# Altium schematic symbol library DIM.SCHLIB: 488 symbols (part 3 of 5)
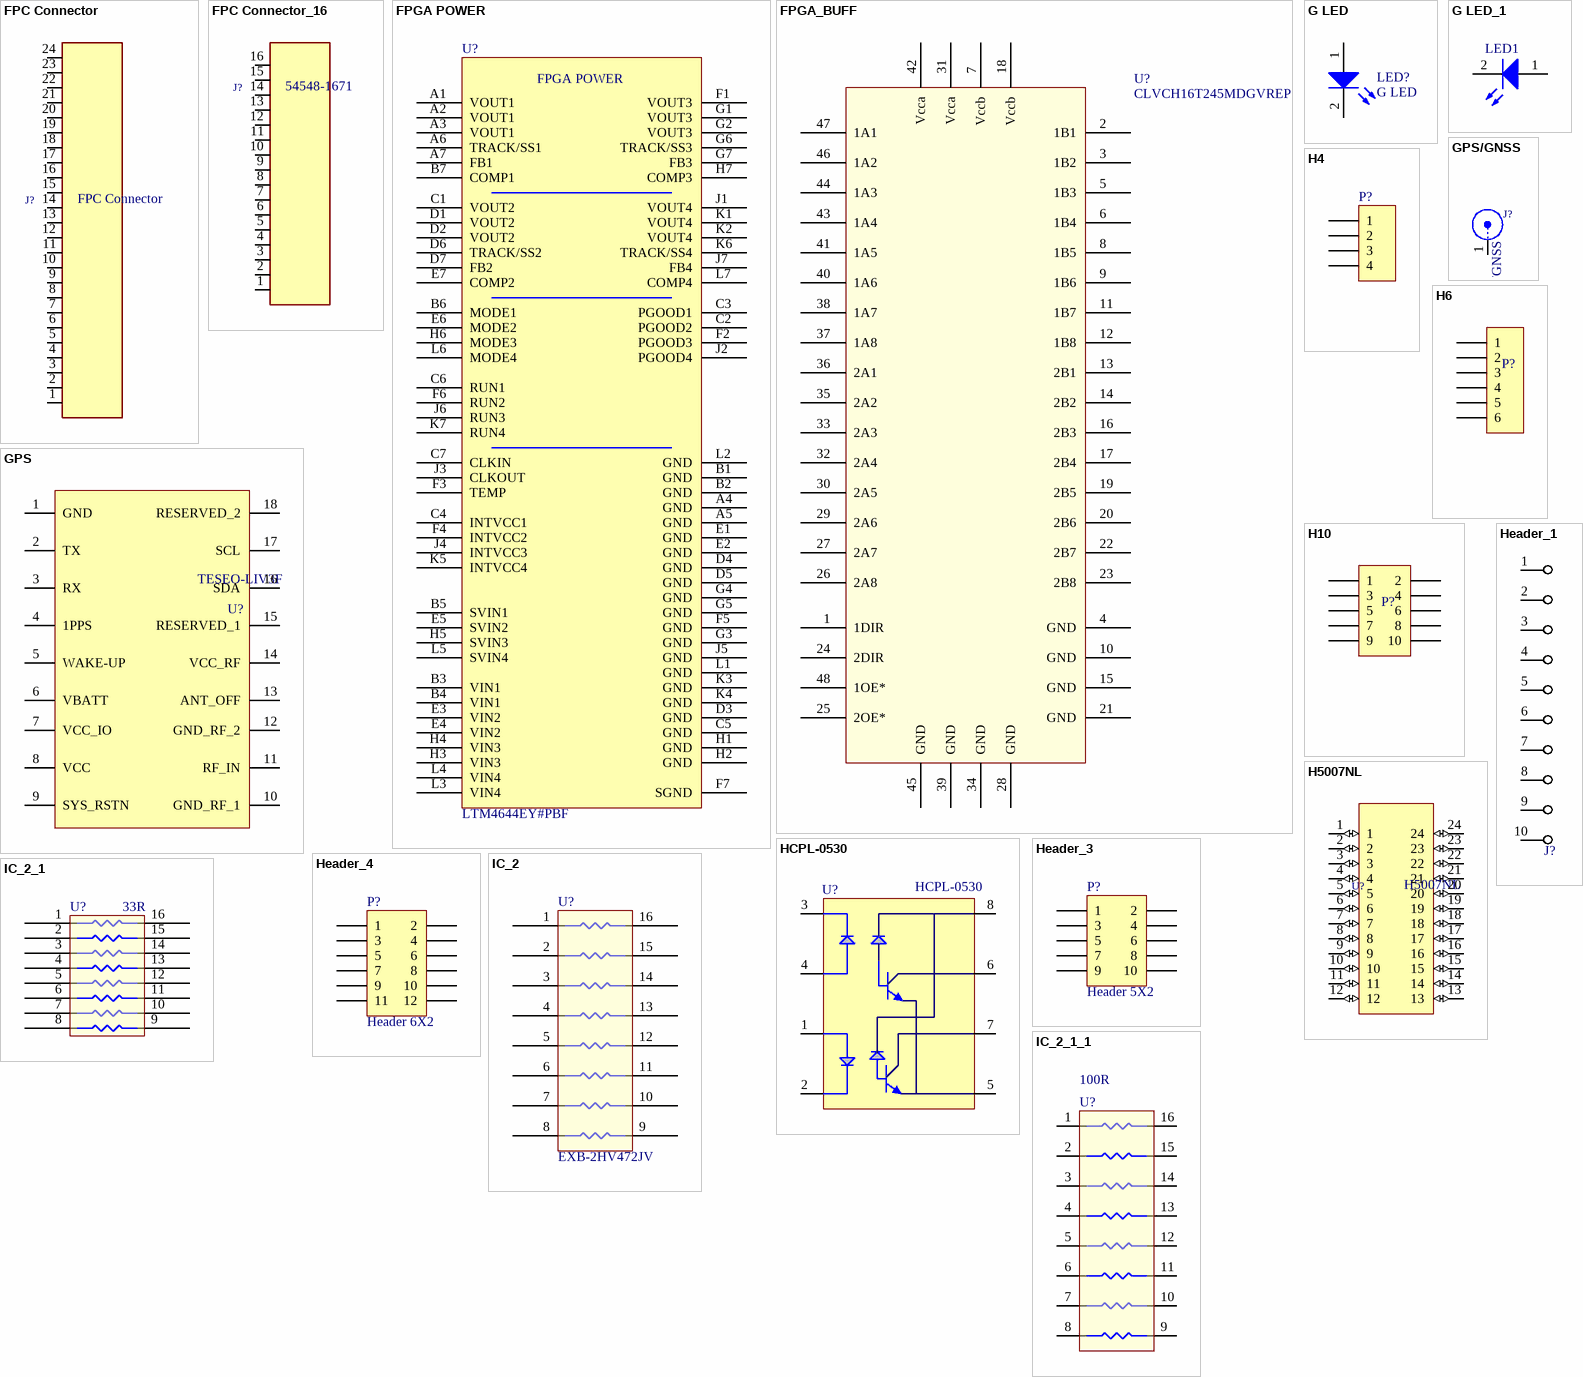
[diagram p27: symbols FPC Connector to IC_2_1_1]

## IC_2_1
designator U?, comment 33R
RES ARRAY 8 RES 33 OHM 1506; Manufacturer: Panasonic Electronic Components; Manufacturer Part Number: EXB-2HV330JV; Value: 33R; Package: 1506; Supplier: Digikey; Supplier Part Number: Y1330CT-ND; Operating Temperature: -55°C ~ 125°C
footprint EXB-2HV472JV
pins: 1, 2, 3, 4, 5, 6, 7, 8, 9, 10, 11, 12, 13, 14, 15, 16

## IC_2_1_1
designator U?, comment 100R
RES ARRAY 8 RES 22 OHM 1506; Manufacturer: Panasonic Electronic Components; Manufacturer Part Number: EXB-2HV101JV; Value: 100R; Package: 1506; Supplier: Digikey; Operating Temperature: -55°C ~ 125°C
footprint EXB-2HV472JV
pins: 1, 2, 3, 4, 5, 6, 7, 8, 9, 10, 11, 12, 13, 14, 15, 16

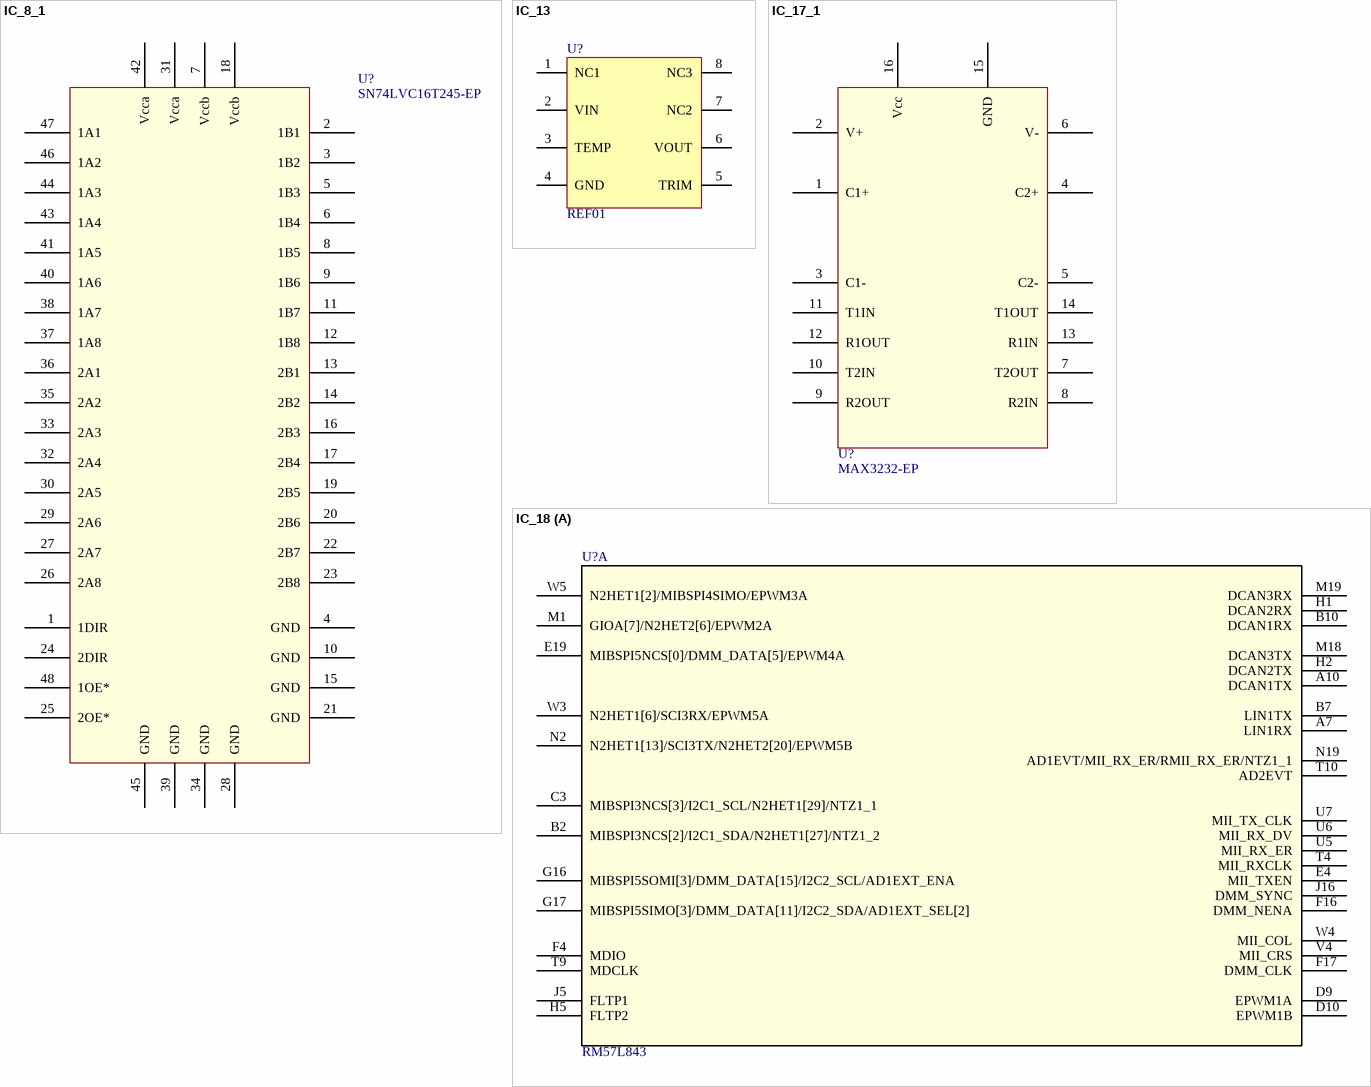
[diagram p9: symbols IC_8_1 to IC_18]

## IC_8_1
designator U?, comment SN74LVC16T245-EP
Transceiver-SN74LVC16T245-EP; Manufacturer: IDT; Manufacturer Part Number: CLVC16T245MDGGEP; Value: SN74LVC16T245-EP; Package: TSSOP-48; Supplier: Mouser; Supplier Part Number: 595-CLVC16T245MDGGEP; Operating Temperature: -55°C ~ 125°C
footprint TSSOP-48
pins: 1 1DIR, 2 1B1, 3 1B2, 4 GND, 5 1B3, 6 1B4, 7 Vccb, 8 1B5, 9 1B6, 10 GND, 11 1B7, 12 1B8, 13 2B1, 14 2B2, 15 GND, 16 2B3, 17 2B4, 18 Vccb, 19 2B5, 20 2B6, 21 GND, 22 2B7, 23 2B8, 24 2DIR, 25 2OE*, 26 2A8, 27 2A7, 28 GND, 29 2A6, 30 2A5, 31 Vcca, 32 2A4, 33 2A3, 34 GND, 35 2A2, 36 2A1, 37 1A8, 38 1A7, 39 GND, 40 1A6, 41 1A5, 42 Vcca, 43 1A4, 44 1A3, 45 GND, 46 1A2, 47 1A1, 48 1OE*

## IC_13
designator U?, comment REF01
Voltage References 10V PREC VOLT REFERENCE IC; Manufacturer: Analog Devices; Manufacturer Part Number: 5962-8958101PA; Package: CDIP-8; Supplier: Mouser; Supplier Part Number: 584-5962-8958101PA; Unit Price: *; Value: REF01
footprint REF01
pins: 1 NC1, 2 VIN, 3 TEMP, 4 GND, 5 TRIM, 6 VOUT, 7 NC2, 8 NC3

## IC_17_1
designator U?, comment MAX3232-EP
RS232-MAX3232-EP; Manufacturer: Texas Instruments; Manufacturer Part Number: MAX3232MDBREP; Value: MAX3232-EP; Package: 16-SSOP; Supplier: Digikey; Supplier Part Number: 296-19873-2-ND; Operating Temperature: -55°C ~ 155°C
footprint SSOP-16
pins: 1 C1+, 2 V+, 3 C1-, 4 C2+, 5 C2-, 6 V-, 7 T2OUT, 8 R2IN, 9 R2OUT, 10 T2IN, 11 T1IN, 12 R1OUT, 13 R1IN, 14 T1OUT, 15 GND, 16 Vcc

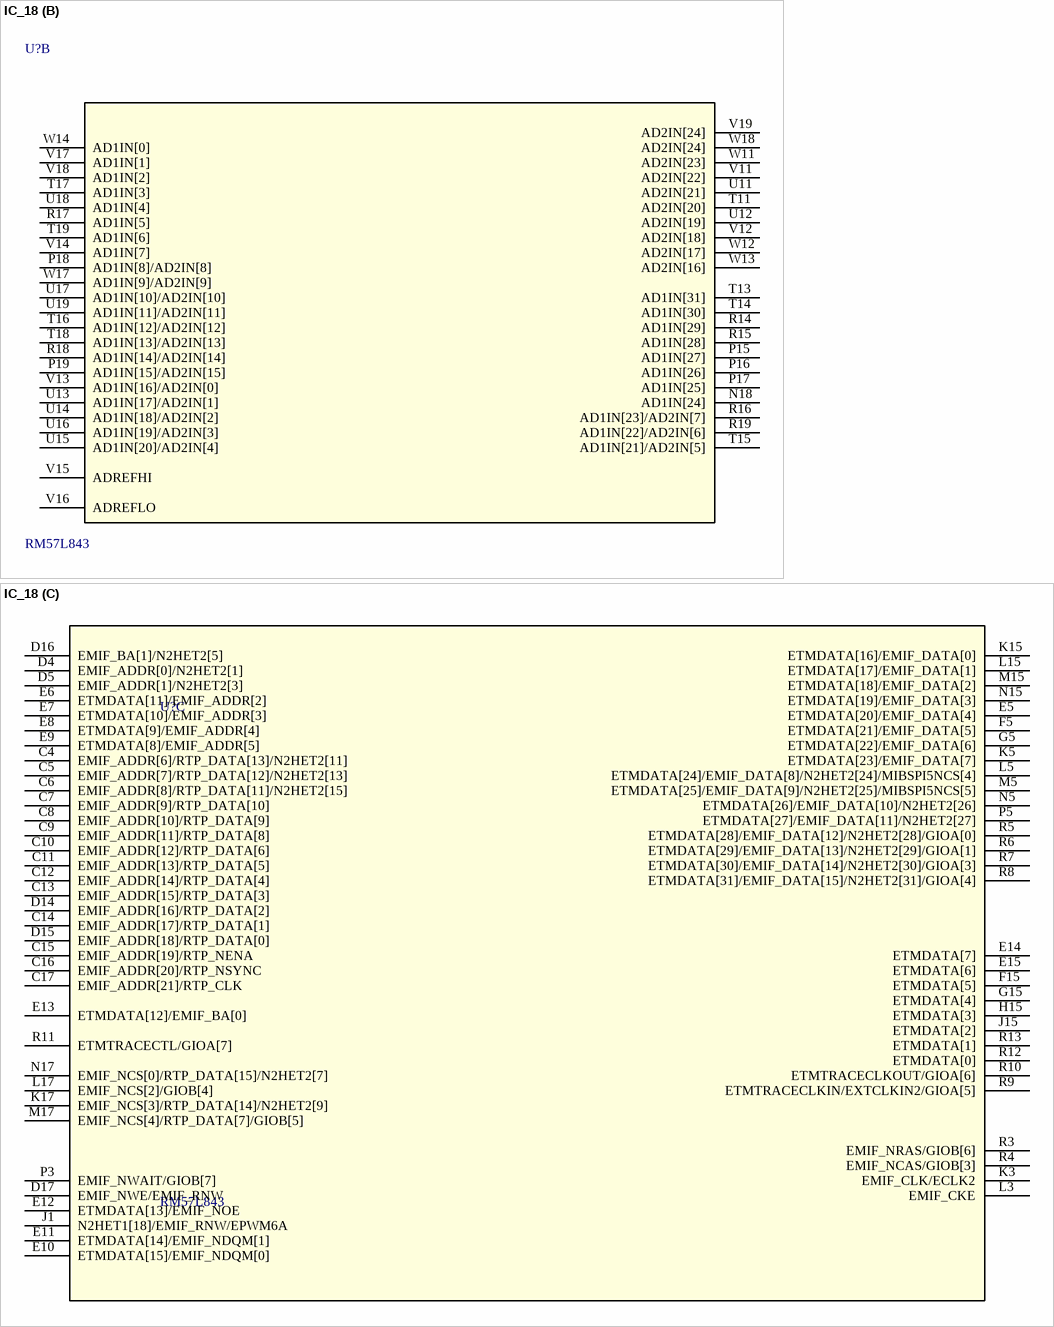
[diagram p10: symbol IC_18]

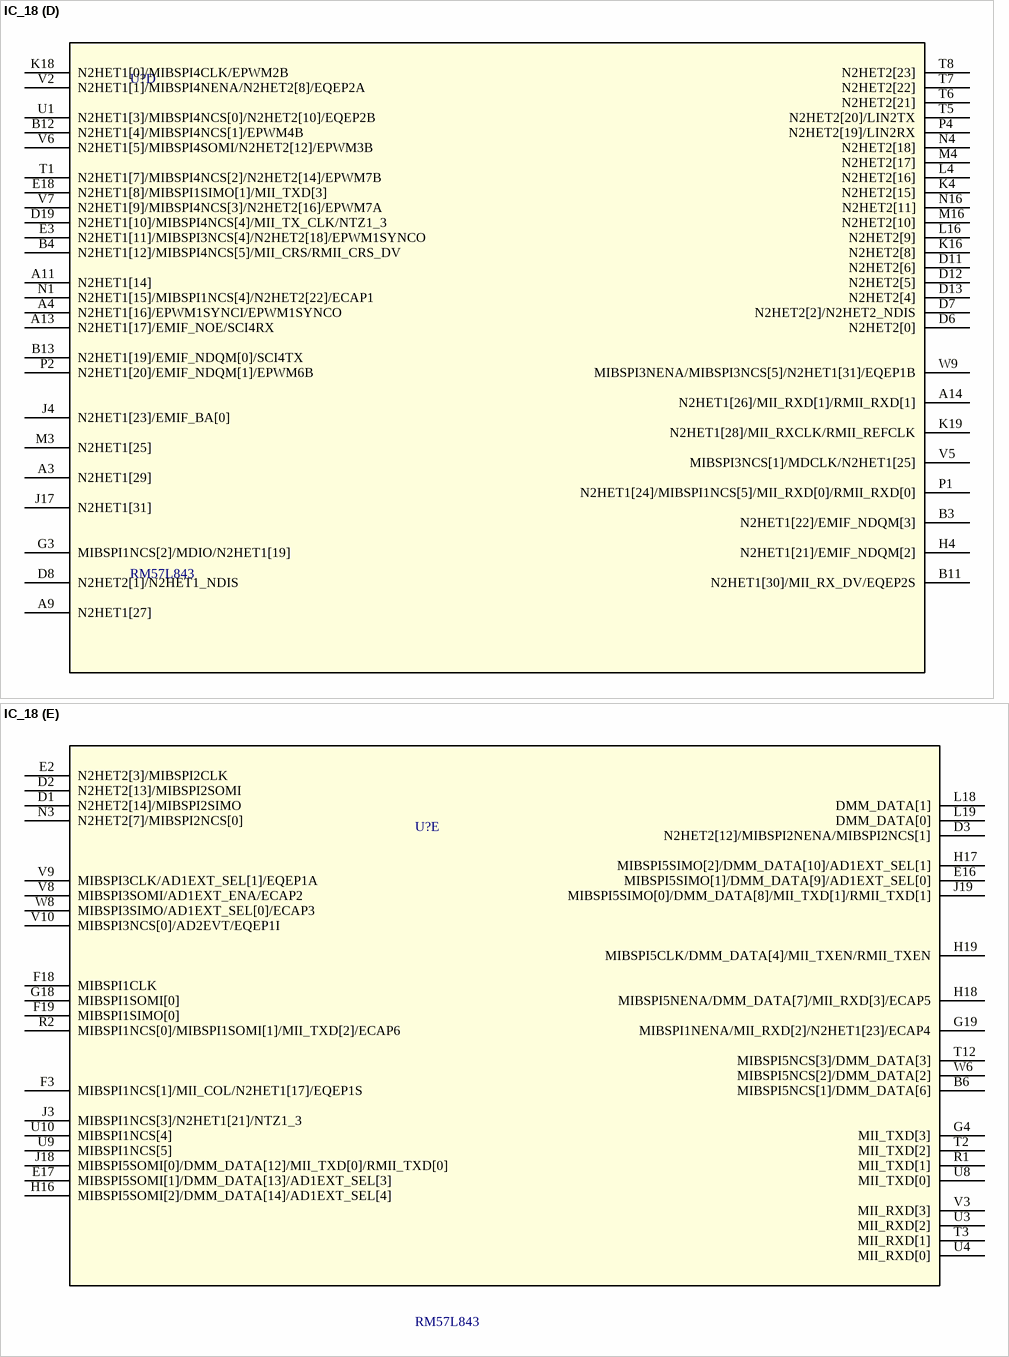
[diagram p11: symbol IC_18]

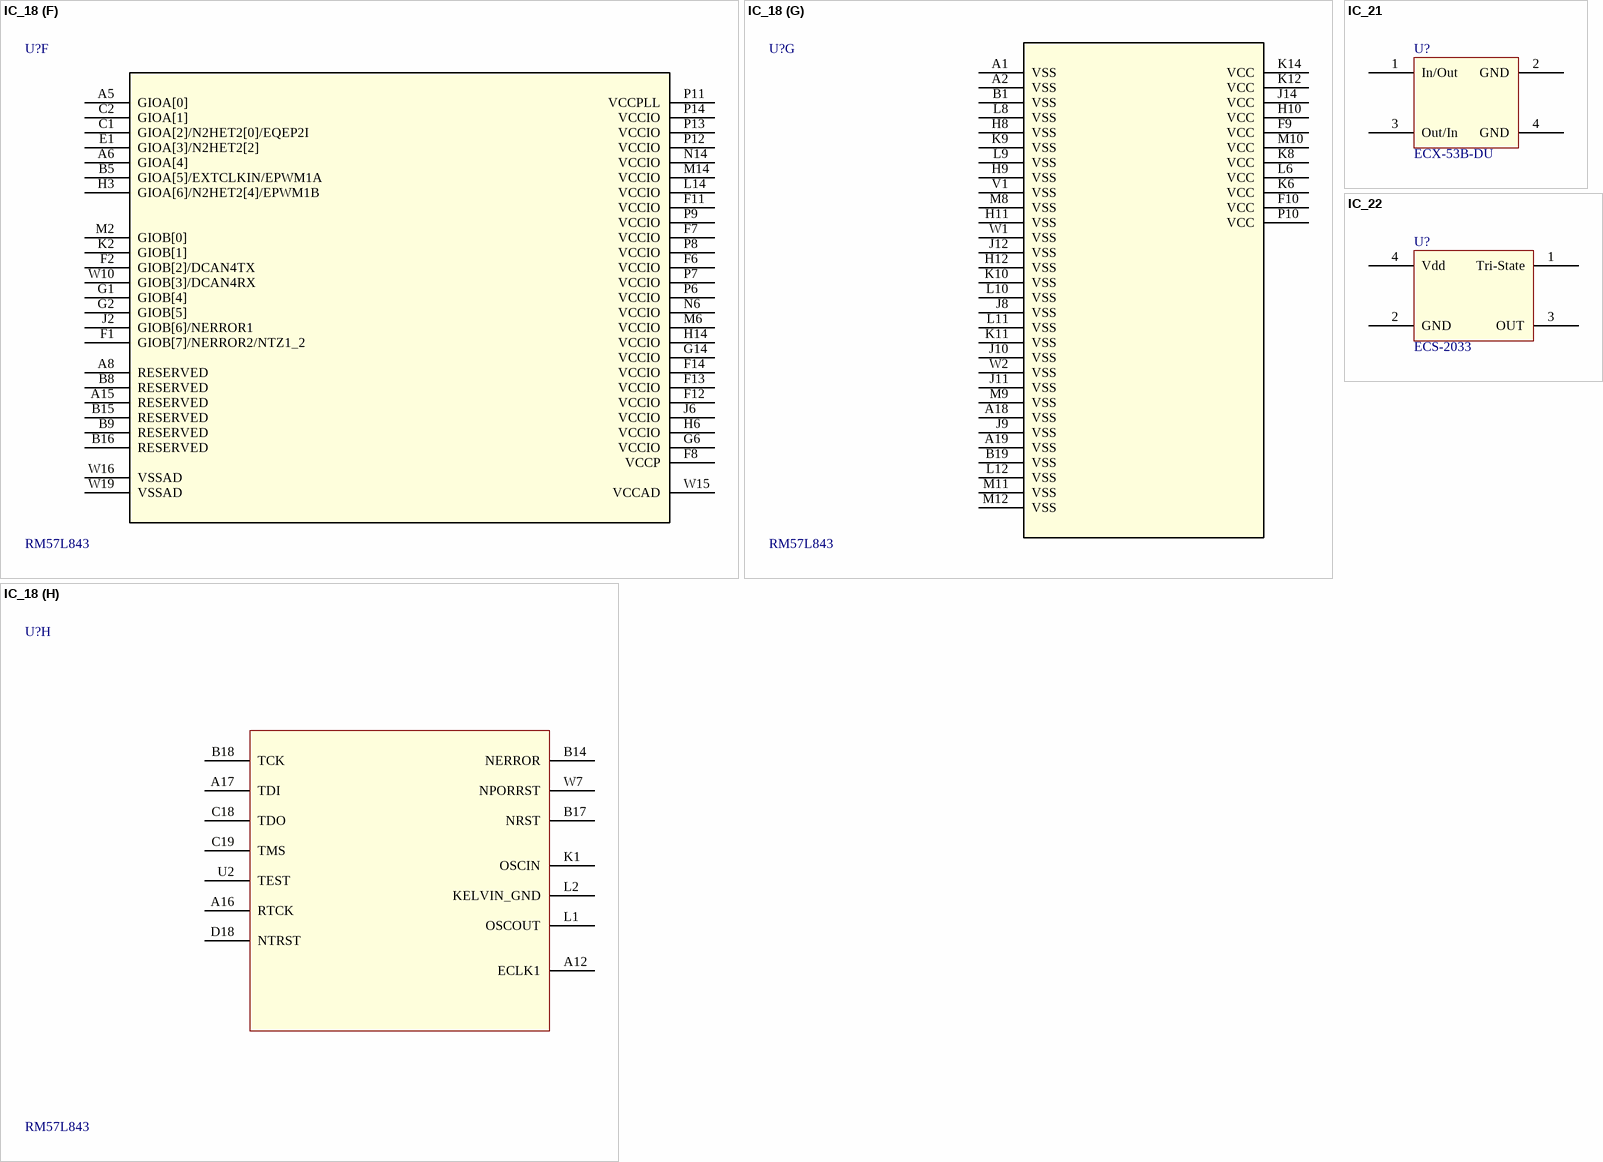
[diagram p12: symbols IC_18 to IC_22]

## IC_18
designator U?, comment RM57L843
uC-RM57L843; Manufacturer: Texas Instruments; Manufacturer Part Number: RM57L843BZWTT; Value: RM57L843; Package: nFBGA-337; Supplier: Mouser; Supplier Part Number: 595-RM57L843BZWTT; Operating Temperature: -40°C ~ 105°C
footprint 337-NFBGA
part A pins: A7 LIN1RX, A10 DCAN1TX, B2 MIBSPI3NCS[2]/I2C1_SDA/N2HET1[27]/NTZ1_2, B7 LIN1TX, B10 DCAN1RX, C3 MIBSPI3NCS[3]/I2C1_SCL/N2HET1[29]/NTZ1_1, D9 EPWM1A, D10 EPWM1B, E4 MII_TXEN, E19 MIBSPI5NCS[0]/DMM_DATA[5]/EPWM4A, F4 MDIO, F16 DMM_NENA, F17 DMM_CLK, G16 MIBSPI5SOMI[3]/DMM_DATA[15]/I2C2_SCL/AD1EXT_ENA, G17 MIBSPI5SIMO[3]/DMM_DATA[11]/I2C2_SDA/AD1EXT_SEL[2], H1 DCAN2RX, H2 DCAN2TX, H5 FLTP2, J5 FLTP1, J16 DMM_SYNC, M1 GIOA[7]/N2HET2[6]/EPWM2A, M18 DCAN3TX, M19 DCAN3RX, N2 N2HET1[13]/SCI3TX/N2HET2[20]/EPWM5B, N19 AD1EVT/MII_RX_ER/RMII_RX_ER/NTZ1_1, T4 MII_RXCLK, T9 MDCLK, T10 AD2EVT, U5 MII_RX_ER, U6 MII_RX_DV, U7 MII_TX_CLK, V4 MII_CRS, W3 N2HET1[6]/SCI3RX/EPWM5A, W4 MII_COL, W5 N2HET1[2]/MIBSPI4SIMO/EPWM3A
part B pins: N18 AD1IN[24], P15 AD1IN[27], P16 AD1IN[26], P17 AD1IN[25], P18 AD1IN[8]/AD2IN[8], P19 AD1IN[15]/AD2IN[15], R14 AD1IN[29], R15 AD1IN[28], R16 AD1IN[23]/AD2IN[7], R17 AD1IN[5], R18 AD1IN[14]/AD2IN[14], R19 AD1IN[22]/AD2IN[6], T11 AD2IN[20], T13 AD1IN[31], T14 AD1IN[30], T15 AD1IN[21]/AD2IN[5], T16 AD1IN[12]/AD2IN[12], T17 AD1IN[3], T18 AD1IN[13]/AD2IN[13], T19 AD1IN[6], U11 AD2IN[21], U12 AD2IN[19], U13 AD1IN[17]/AD2IN[1], U14 AD1IN[18]/AD2IN[2], U15 AD1IN[20]/AD2IN[4], U16 AD1IN[19]/AD2IN[3], U17 AD1IN[10]/AD2IN[10], U18 AD1IN[4], U19 AD1IN[11]/AD2IN[11], V11 AD2IN[22], V12 AD2IN[18], V13 AD1IN[16]/AD2IN[0], V14 AD1IN[7], V15 ADREFHI, V16 ADREFLO, V17 AD1IN[1], V18 AD1IN[2], V19 AD2IN[24], W11 AD2IN[23], W12 AD2IN[17], W13 AD2IN[16], W14 AD1IN[0], W17 AD1IN[9]/AD2IN[9], W18 AD2IN[24]
part C pins: C4 EMIF_ADDR[6]/RTP_DATA[13]/N2HET2[11], C5 EMIF_ADDR[7]/RTP_DATA[12]/N2HET2[13], C6 EMIF_ADDR[8]/RTP_DATA[11]/N2HET2[15], C7 EMIF_ADDR[9]/RTP_DATA[10], C8 EMIF_ADDR[10]/RTP_DATA[9], C9 EMIF_ADDR[11]/RTP_DATA[8], C10 EMIF_ADDR[12]/RTP_DATA[6], C11 EMIF_ADDR[13]/RTP_DATA[5], C12 EMIF_ADDR[14]/RTP_DATA[4], C13 EMIF_ADDR[15]/RTP_DATA[3], C14 EMIF_ADDR[17]/RTP_DATA[1], C15 EMIF_ADDR[19]/RTP_NENA, C16 EMIF_ADDR[20]/RTP_NSYNC, C17 EMIF_ADDR[21]/RTP_CLK, D4 EMIF_ADDR[0]/N2HET2[1], D5 EMIF_ADDR[1]/N2HET2[3], D14 EMIF_ADDR[16]/RTP_DATA[2], D15 EMIF_ADDR[18]/RTP_DATA[0], D16 EMIF_BA[1]/N2HET2[5], D17 EMIF_NWE/EMIF_RNW, E5 ETMDATA[20]/EMIF_DATA[4], E6 ETMDATA[11]/EMIF_ADDR[2], E7 ETMDATA[10]/EMIF_ADDR[3], E8 ETMDATA[9]/EMIF_ADDR[4], E9 ETMDATA[8]/EMIF_ADDR[5], E10 ETMDATA[15]/EMIF_NDQM[0], E11 ETMDATA[14]/EMIF_NDQM[1], E12 ETMDATA[13]/EMIF_NOE, E13 ETMDATA[12]/EMIF_BA[0], E14 ETMDATA[7], E15 ETMDATA[6], F5 ETMDATA[21]/EMIF_DATA[5], F15 ETMDATA[5], G5 ETMDATA[22]/EMIF_DATA[6], G15 ETMDATA[4], H15 ETMDATA[3], J1 N2HET1[18]/EMIF_RNW/EPWM6A, J15 ETMDATA[2], K3 EMIF_CLK/ECLK2, K5 ETMDATA[23]/EMIF_DATA[7], K15 ETMDATA[16]/EMIF_DATA[0], K17 EMIF_NCS[3]/RTP_DATA[14]/N2HET2[9], L3 EMIF_CKE, L5 ETMDATA[24]/EMIF_DATA[8]/N2HET2[24]/MIBSPI5NCS[4], L15 ETMDATA[17]/EMIF_DATA[1], L17 EMIF_NCS[2]/GIOB[4], M5 ETMDATA[25]/EMIF_DATA[9]/N2HET2[25]/MIBSPI5NCS[5], M15 ETMDATA[18]/EMIF_DATA[2], M17 EMIF_NCS[4]/RTP_DATA[7]/GIOB[5], N5 ETMDATA[26]/EMIF_DATA[10]/N2HET2[26], N15 ETMDATA[19]/EMIF_DATA[3], N17 EMIF_NCS[0]/RTP_DATA[15]/N2HET2[7], P3 EMIF_NWAIT/GIOB[7], P5 ETMDATA[27]/EMIF_DATA[11]/N2HET2[27], R3 EMIF_NRAS/GIOB[6], R4 EMIF_NCAS/GIOB[3], R5 ETMDATA[28]/EMIF_DATA[12]/N2HET2[28]/GIOA[0], R6 ETMDATA[29]/EMIF_DATA[13]/N2HET2[29]/GIOA[1], R7 ETMDATA[30]/EMIF_DATA[14]/N2HET2[30]/GIOA[3], R8 ETMDATA[31]/EMIF_DATA[15]/N2HET2[31]/GIOA[4], R9 ETMTRACECLKIN/EXTCLKIN2/GIOA[5], R10 ETMTRACECLKOUT/GIOA[6], R11 ETMTRACECTL/GIOA[7], R12 ETMDATA[0], R13 ETMDATA[1]
part D pins: A3 N2HET1[29], A4 N2HET1[16]/EPWM1SYNCI/EPWM1SYNCO, A9 N2HET1[27], A11 N2HET1[14], A13 N2HET1[17]/EMIF_NOE/SCI4RX, A14 N2HET1[26]/MII_RXD[1]/RMII_RXD[1], B3 N2HET1[22]/EMIF_NDQM[3], B4 N2HET1[12]/MIBSPI4NCS[5]/MII_CRS/RMII_CRS_DV, B11 N2HET1[30]/MII_RX_DV/EQEP2S, B12 N2HET1[4]/MIBSPI4NCS[1]/EPWM4B, B13 N2HET1[19]/EMIF_NDQM[0]/SCI4TX, D6 N2HET2[0], D7 N2HET2[2]/N2HET2_NDIS, D8 N2HET2[1]/N2HET1_NDIS, D11 N2HET2[6], D12 N2HET2[5], D13 N2HET2[4], D19 N2HET1[10]/MIBSPI4NCS[4]/MII_TX_CLK/NTZ1_3, E3 N2HET1[11]/MIBSPI3NCS[4]/N2HET2[18]/EPWM1SYNCO, E18 N2HET1[8]/MIBSPI1SIMO[1]/MII_TXD[3], G3 MIBSPI1NCS[2]/MDIO/N2HET1[19], H4 N2HET1[21]/EMIF_NDQM[2], J4 N2HET1[23]/EMIF_BA[0], J17 N2HET1[31], K4 N2HET2[15], K16 N2HET2[8], K18 N2HET1[0]/MIBSPI4CLK/EPWM2B, K19 N2HET1[28]/MII_RXCLK/RMII_REFCLK, L4 N2HET2[16], L16 N2HET2[9], M3 N2HET1[25], M4 N2HET2[17], M16 N2HET2[10], N1 N2HET1[15]/MIBSPI1NCS[4]/N2HET2[22]/ECAP1, N4 N2HET2[18], N16 N2HET2[11], P1 N2HET1[24]/MIBSPI1NCS[5]/MII_RXD[0]/RMII_RXD[0], P2 N2HET1[20]/EMIF_NDQM[1]/EPWM6B, P4 N2HET2[19]/LIN2RX, T1 N2HET1[7]/MIBSPI4NCS[2]/N2HET2[14]/EPWM7B, T5 N2HET2[20]/LIN2TX, T6 N2HET2[21], T7 N2HET2[22], T8 N2HET2[23], U1 N2HET1[3]/MIBSPI4NCS[0]/N2HET2[10]/EQEP2B, V2 N2HET1[1]/MIBSPI4NENA/N2HET2[8]/EQEP2A, V5 MIBSPI3NCS[1]/MDCLK/N2HET1[25], V6 N2HET1[5]/MIBSPI4SOMI/N2HET2[12]/EPWM3B, V7 N2HET1[9]/MIBSPI4NCS[3]/N2HET2[16]/EPWM7A, W9 MIBSPI3NENA/MIBSPI3NCS[5]/N2HET1[31]/EQEP1B
part E pins: B6 MIBSPI5NCS[1]/DMM_DATA[6], D1 N2HET2[14]/MIBSPI2SIMO, D2 N2HET2[13]/MIBSPI2SOMI, D3 N2HET2[12]/MIBSPI2NENA/MIBSPI2NCS[1], E2 N2HET2[3]/MIBSPI2CLK, E16 MIBSPI5SIMO[1]/DMM_DATA[9]/AD1EXT_SEL[0], E17 MIBSPI5SOMI[1]/DMM_DATA[13]/AD1EXT_SEL[3], F3 MIBSPI1NCS[1]/MII_COL/N2HET1[17]/EQEP1S, F18 MIBSPI1CLK, F19 MIBSPI1SIMO[0], G4 MII_TXD[3], G18 MIBSPI1SOMI[0], G19 MIBSPI1NENA/MII_RXD[2]/N2HET1[23]/ECAP4, H16 MIBSPI5SOMI[2]/DMM_DATA[14]/AD1EXT_SEL[4], H17 MIBSPI5SIMO[2]/DMM_DATA[10]/AD1EXT_SEL[1], H18 MIBSPI5NENA/DMM_DATA[7]/MII_RXD[3]/ECAP5, H19 MIBSPI5CLK/DMM_DATA[4]/MII_TXEN/RMII_TXEN, J3 MIBSPI1NCS[3]/N2HET1[21]/NTZ1_3, J18 MIBSPI5SOMI[0]/DMM_DATA[12]/MII_TXD[0]/RMII_TXD[0], J19 MIBSPI5SIMO[0]/DMM_DATA[8]/MII_TXD[1]/RMII_TXD[1], L18 DMM_DATA[1], L19 DMM_DATA[0], N3 N2HET2[7]/MIBSPI2NCS[0], R1 MII_TXD[1], R2 MIBSPI1NCS[0]/MIBSPI1SOMI[1]/MII_TXD[2]/ECAP6, T2 MII_TXD[2], T3 MII_RXD[1], T12 MIBSPI5NCS[3]/DMM_DATA[3], U3 MII_RXD[2], U4 MII_RXD[0], U8 MII_TXD[0], U9 MIBSPI1NCS[5], U10 MIBSPI1NCS[4], V3 MII_RXD[3], V8 MIBSPI3SOMI/AD1EXT_ENA/ECAP2, V9 MIBSPI3CLK/AD1EXT_SEL[1]/EQEP1A, V10 MIBSPI3NCS[0]/AD2EVT/EQEP1I, W6 MIBSPI5NCS[2]/DMM_DATA[2], W8 MIBSPI3SIMO/AD1EXT_SEL[0]/ECAP3
part F pins: A5 GIOA[0], A6 GIOA[4], A8 RESERVED, A15 RESERVED, B5 GIOA[5]/EXTCLKIN/EPWM1A, B8 RESERVED, B9 RESERVED, B15 RESERVED, B16 RESERVED, C1 GIOA[2]/N2HET2[0]/EQEP2I, C2 GIOA[1], E1 GIOA[3]/N2HET2[2], F1 GIOB[7]/NERROR2/NTZ1_2, F2 GIOB[2]/DCAN4TX, F6 VCCIO, F7 VCCIO, F8 VCCP, F11 VCCIO, F12 VCCIO, F13 VCCIO, F14 VCCIO, G1 GIOB[4], G2 GIOB[5], G6 VCCIO, G14 VCCIO, H3 GIOA[6]/N2HET2[4]/EPWM1B, H6 VCCIO, H14 VCCIO, J2 GIOB[6]/NERROR1, J6 VCCIO, K2 GIOB[1], L14 VCCIO, M2 GIOB[0], M6 VCCIO, M14 VCCIO, N6 VCCIO, N14 VCCIO, P6 VCCIO, P7 VCCIO, P8 VCCIO, P9 VCCIO, P11 VCCPLL, P12 VCCIO, P13 VCCIO, P14 VCCIO, W10 GIOB[3]/DCAN4RX, W15 VCCAD, W16 VSSAD, W19 VSSAD
part G pins: A1 VSS, A2 VSS, A18 VSS, A19 VSS, B1 VSS, B19 VSS, F9 VCC, F10 VCC, H8 VSS, H9 VSS, H10 VCC, H11 VSS, H12 VSS, J8 VSS, J9 VSS, J10 VSS, J11 VSS, J12 VSS, J14 VCC, K6 VCC, K8 VCC, K9 VSS, K10 VSS, K11 VSS, K12 VCC, K14 VCC, L6 VCC, L8 VSS, L9 VSS, L10 VSS, L11 VSS, L12 VSS, M8 VSS, M9 VSS, M10 VCC, M11 VSS, M12 VSS, P10 VCC, V1 VSS, W1 VSS, W2 VSS
part H pins: A12 ECLK1, A16 RTCK, A17 TDI, B14 NERROR, B17 NRST, B18 TCK, C18 TDO, C19 TMS, D18 NTRST, K1 OSCIN, L1 OSCOUT, L2 KELVIN_GND, U2 TEST, W7 NPORRST

## IC_21
designator U?, comment ECX-53B-DU
Crystal_ECX-53B-DU; Manufacturer: ECS Inc.; Manufacturer Part Number: ECS-160-20-30B-DU; Value: ECX-53B-DU; Package: 4-SMD, No Lead; Supplier: Digikey; Supplier Part Number: XC1513CT-ND; Operating Temperature: -55°C ~ 125°C
footprint ECS-160
pins: 1 In/Out, 2 GND, 3 Out/In, 4 GND

## IC_22
designator U?, comment ECS-2033
Oscillator_ECS-2033; Manufacturer: ECS Inc.; Manufacturer Part Number: ECS-2033-160-AU; Value: ECS-2033; Package: 4-SMD, No Lead; Supplier: Digikey; Supplier Part Number: XC1858CT-ND; Operating Temperature: -55°C ~ 125°C
footprint ECS-2033
pins: 1 Tri-State, 2 GND, 3 OUT, 4 Vdd

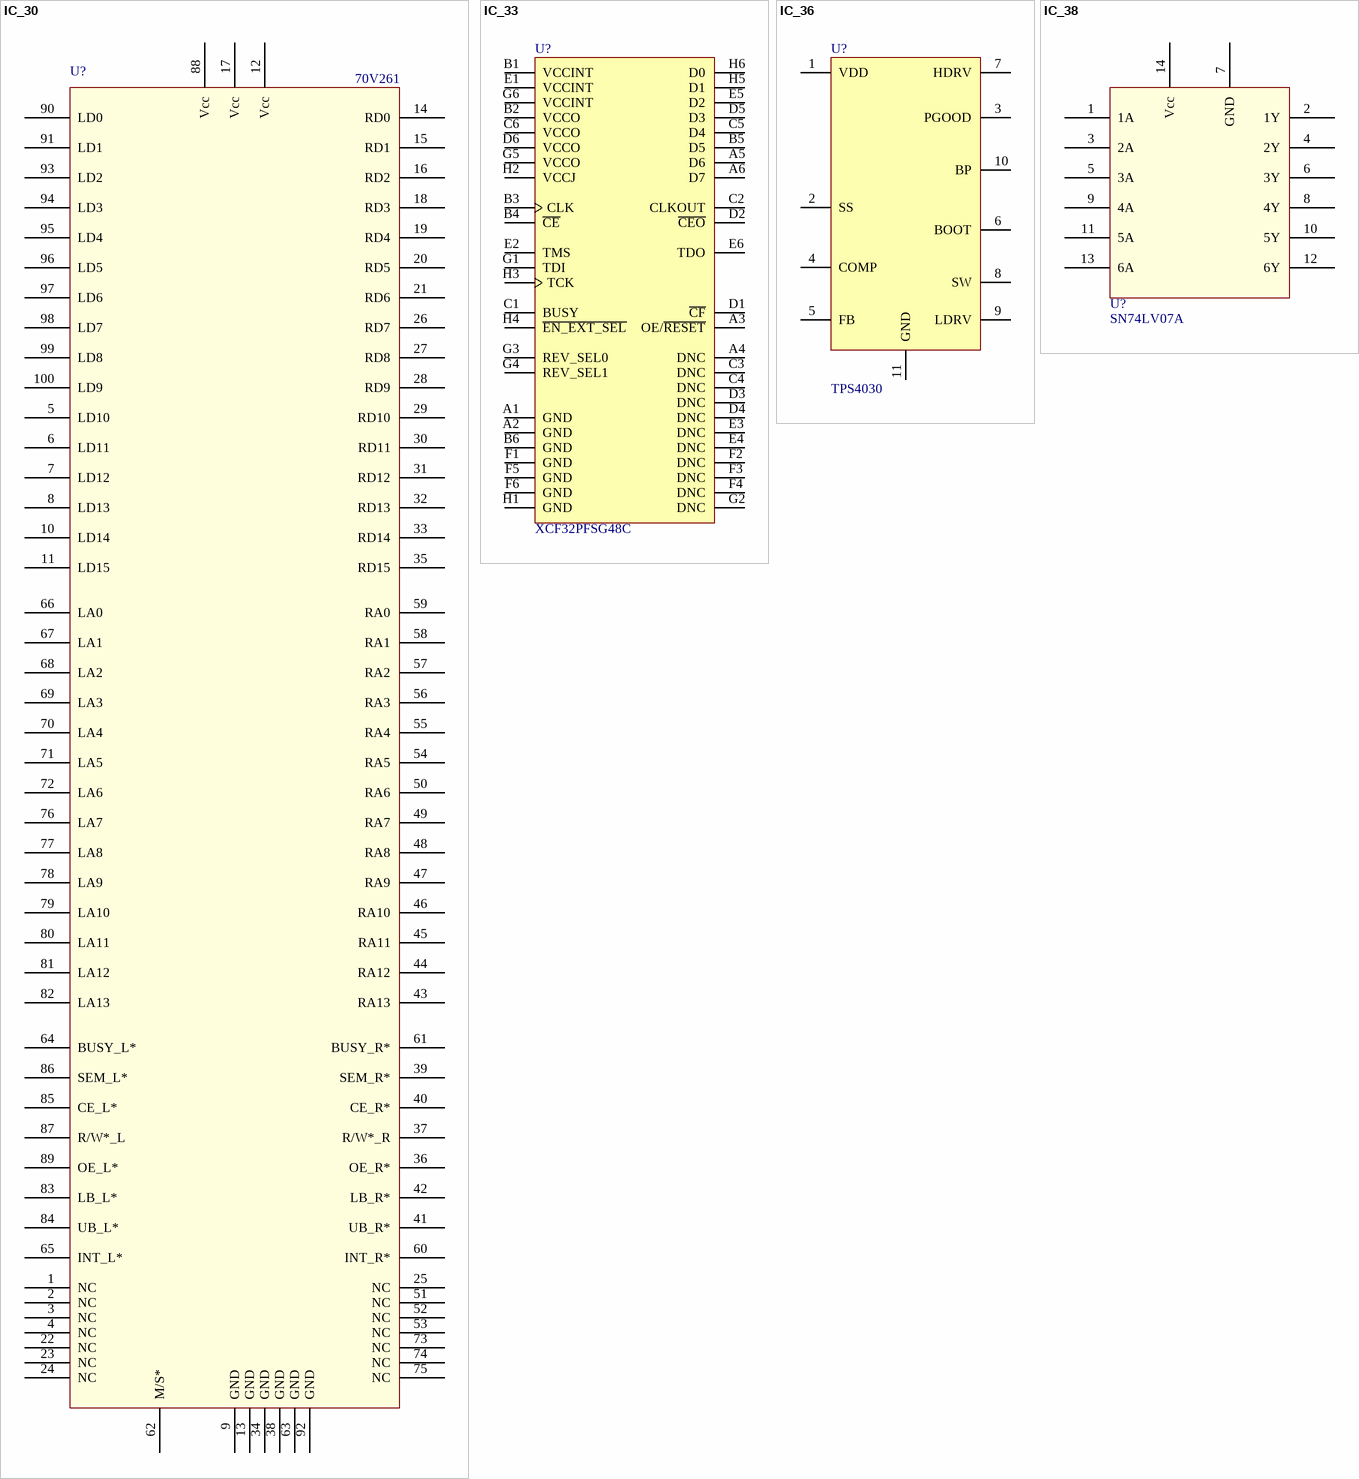
[diagram p13: symbols IC_30 to IC_38]

## IC_30
designator U?, comment 70V261
70V261_DPRAM; Manufacturer: IDT; Manufacturer Part Number: 70V261L25PFGI; Value: 70V261; Package: 100-LQFP; Supplier: Digikey; Supplier Part Number: 800-3672-ND
footprint 100-LQFP
pins: 1 NC, 2 NC, 3 NC, 4 NC, 5 LD10, 6 LD11, 7 LD12, 8 LD13, 9 GND, 10 LD14, 11 LD15, 12 Vcc, 13 GND, 14 RD0, 15 RD1, 16 RD2, 17 Vcc, 18 RD3, 19 RD4, 20 RD5, 21 RD6, 22 NC, 23 NC, 24 NC, 25 NC, 26 RD7, 27 RD8, 28 RD9, 29 RD10, 30 RD11, 31 RD12, 32 RD13, 33 RD14, 34 GND, 35 RD15, 36 OE_R*, 37 R/W*_R, 38 GND, 39 SEM_R*, 40 CE_R*, 41 UB_R*, 42 LB_R*, 43 RA13, 44 RA12, 45 RA11, 46 RA10, 47 RA9, 48 RA8, 49 RA7, 50 RA6, 51 NC, 52 NC, 53 NC, 54 RA5, 55 RA4, 56 RA3, 57 RA2, 58 RA1, 59 RA0, 60 INT_R*, 61 BUSY_R*, 62 M/S*, 63 GND, 64 BUSY_L*, 65 INT_L*, 66 LA0, 67 LA1, 68 LA2, 69 LA3, 70 LA4, 71 LA5, 72 LA6, 73 NC, 74 NC, 75 NC, 76 LA7, 77 LA8, 78 LA9, 79 LA10, 80 LA11, 81 LA12, 82 LA13, 83 LB_L*, 84 UB_L*, 85 CE_L*, 86 SEM_L*, 87 R/W*_L, 88 Vcc, 89 OE_L*, 90 LD0, 91 LD1, 92 GND, 93 LD2, 94 LD3, 95 LD4, 96 LD5, 97 LD6, 98 LD7, 99 LD8, 100 LD9

## IC_33
designator U?, comment XCF32PFSG48C
PROM_XCF32PFSG48C; Manufacturer: Xilinx Inc.; Supplier Part Number: 122-1457-ND; Manufacturer Part Number: XCF32PFSG48C; Package: 48-TFBGA, CSPBGA; Supplier: Digi-Key; Value: XCF32PFSG48C
footprint 48-TFBGA (BGA, 48-Leads, Body 9x8mm, Pitch 0.8mm)
pins: A1 GND, A2 GND, A3 OE/~{RESET}, A4 DNC, A5 D6, A6 D7, B1 VCCINT, B2 VCCO, B3 CLK, B4 ~{CE}, B5 D5, B6 GND, C1 BUSY, C2 CLKOUT, C3 DNC, C4 DNC, C5 D4, C6 VCCO, D1 ~{CF}, D2 ~{CEO}, D3 DNC, D4 DNC, D5 D3, D6 VCCO, E1 VCCINT, E2 TMS, E3 DNC, E4 DNC, E5 D2, E6 TDO, F1 GND, F2 DNC, F3 DNC, F4 DNC, F5 GND, F6 GND, G1 TDI, G2 DNC, G3 REV_SEL0, G4 REV_SEL1, G5 VCCO, G6 VCCINT, H1 GND, H2 VCCJ, H3 TCK, H4 ~{EN_EXT_SEL}, H5 D1, H6 D0

## IC_36
designator U?, comment TPS4030
Buck Regulator Positive Output Step-Down DC-DC Controller IC 10-VSON (3x3); Manufacturer: Texas Instruments; Manufacturer Part Number: TPS40304DRCR; Package: 10-VSON Exposed Pad; Supplier: Digi-Key; Supplier Part Number: 296-39399-1-ND; Unit Price: *; Value: TPS4030
footprint TPS40304DRCR
pins: 1 VDD, 2 SS, 3 PGOOD, 4 COMP, 5 FB, 6 BOOT, 7 HDRV, 8 SW, 9 LDRV, 10 BP, 11 GND

## IC_38
designator U?, comment SN74LV07A
Manufacturer: Texas Instruments; Manufacturer Part Number: SN74LV07AD; Value: SN74LV07A; Package: 14-SOIC; Supplier: Digikey; Supplier Part Number: 296-3764-5-ND
footprint SOIC-14
pins: 1 1A, 2 1Y, 3 2A, 4 2Y, 5 3A, 6 3Y, 7 GND, 8 4Y, 9 4A, 10 5Y, 11 5A, 12 6Y, 13 6A, 14 Vcc

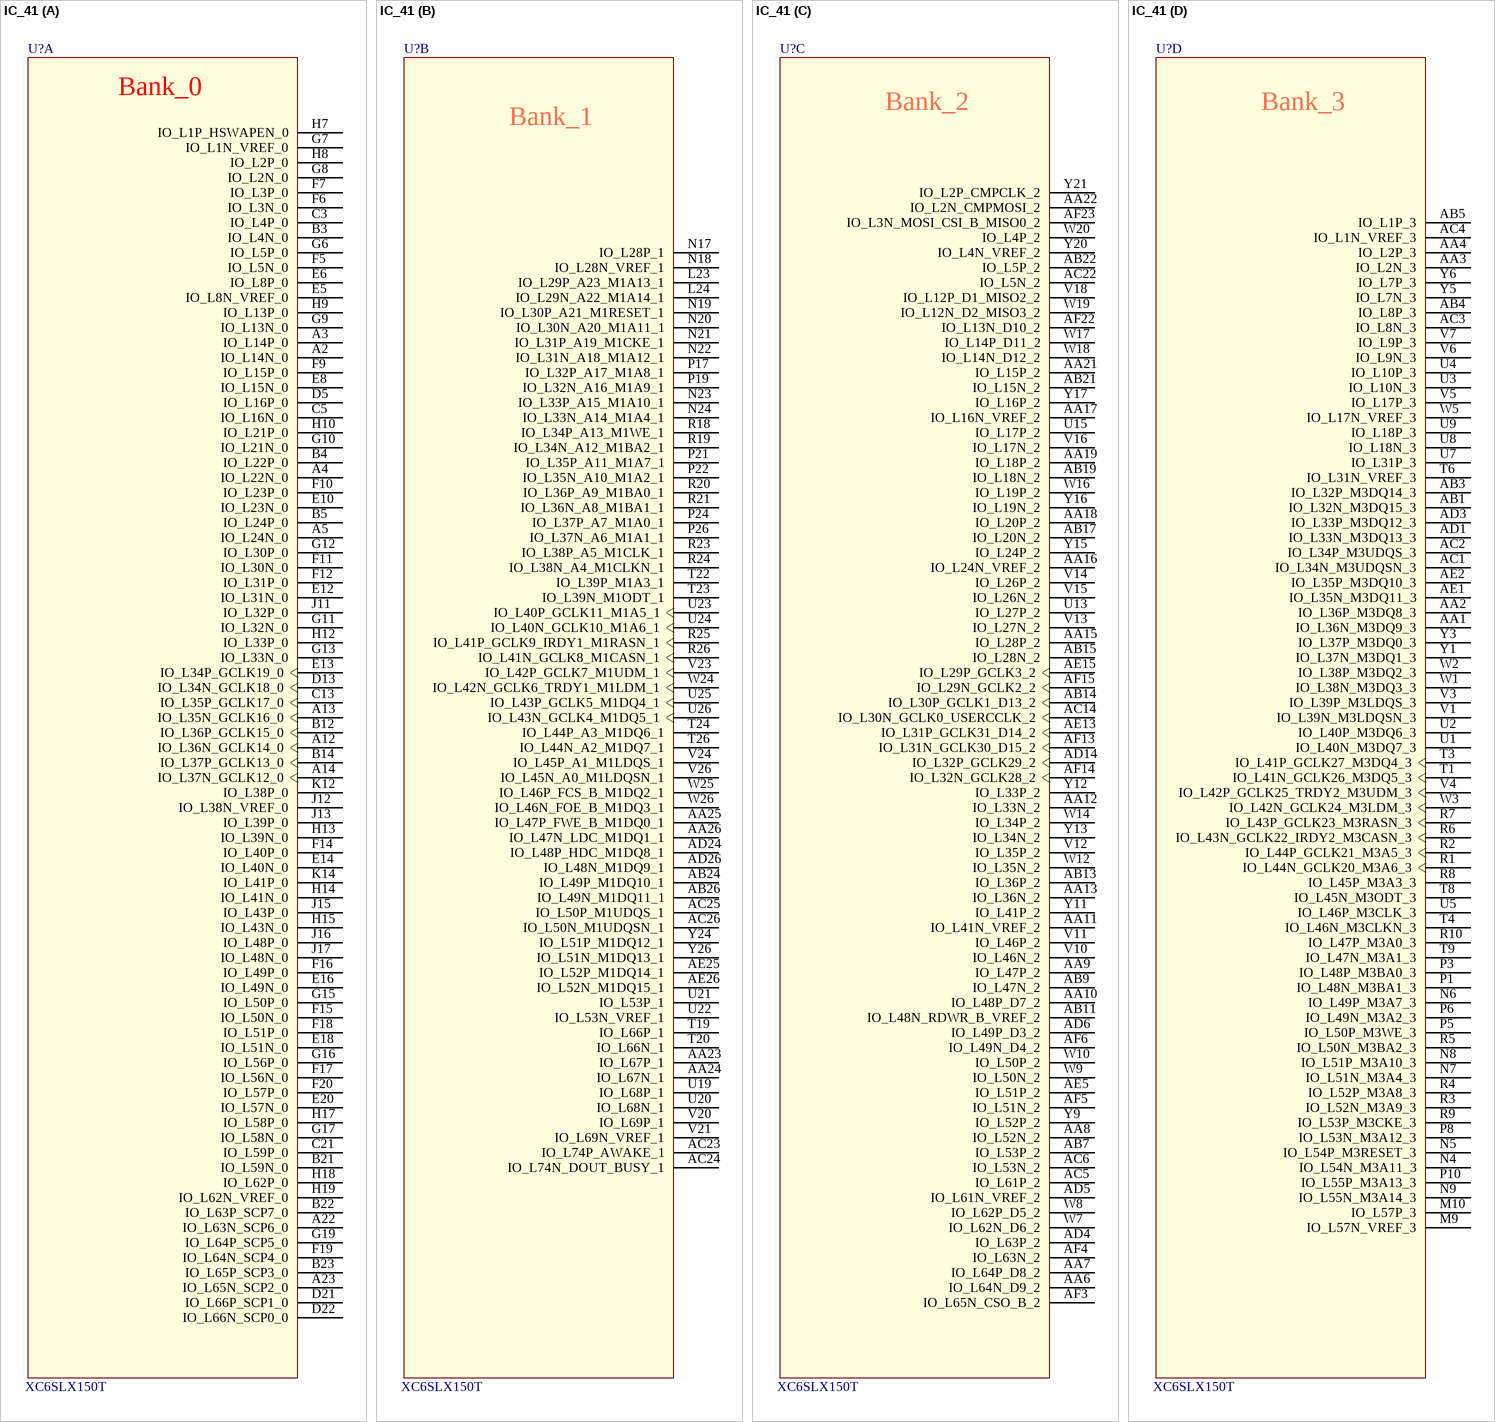
[diagram p14: symbol IC_41]

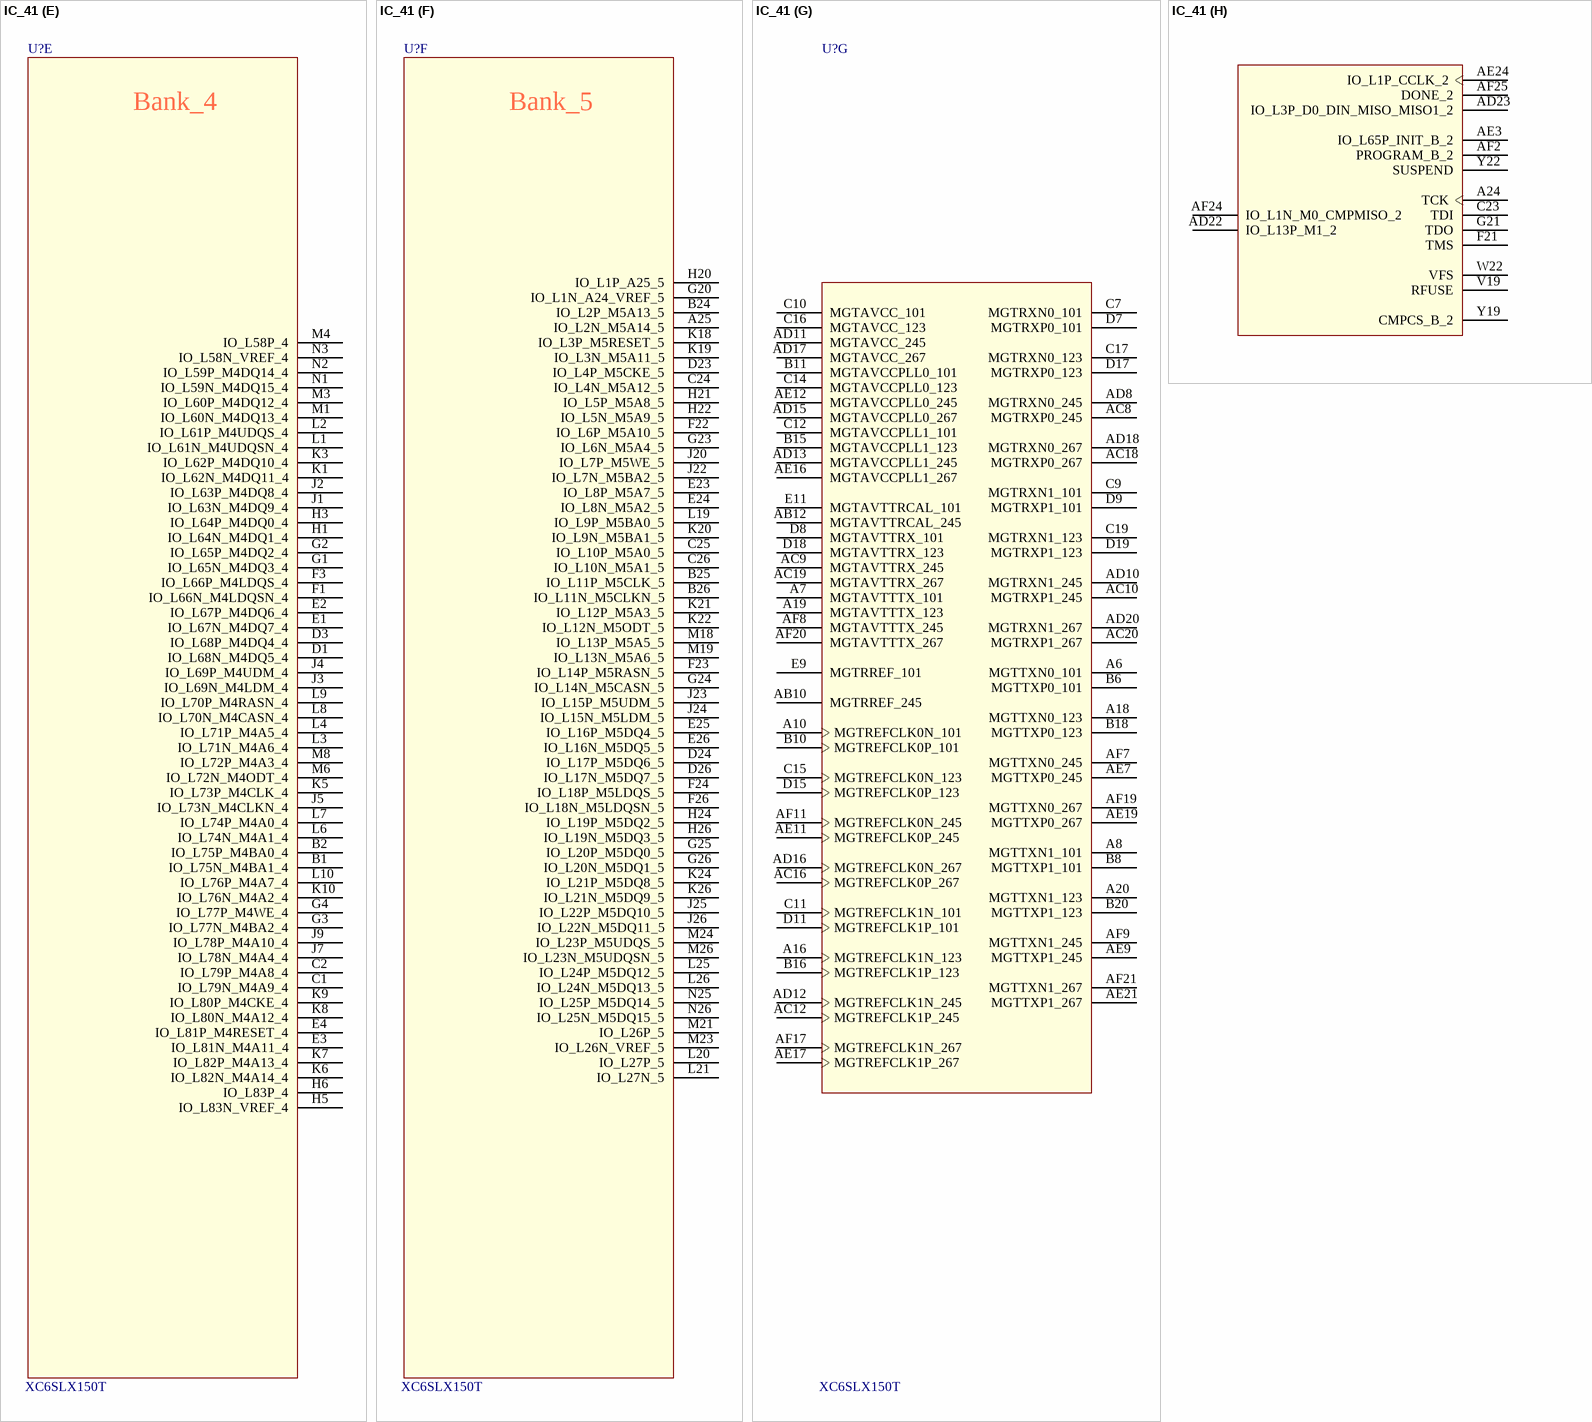
[diagram p15: symbol IC_41]

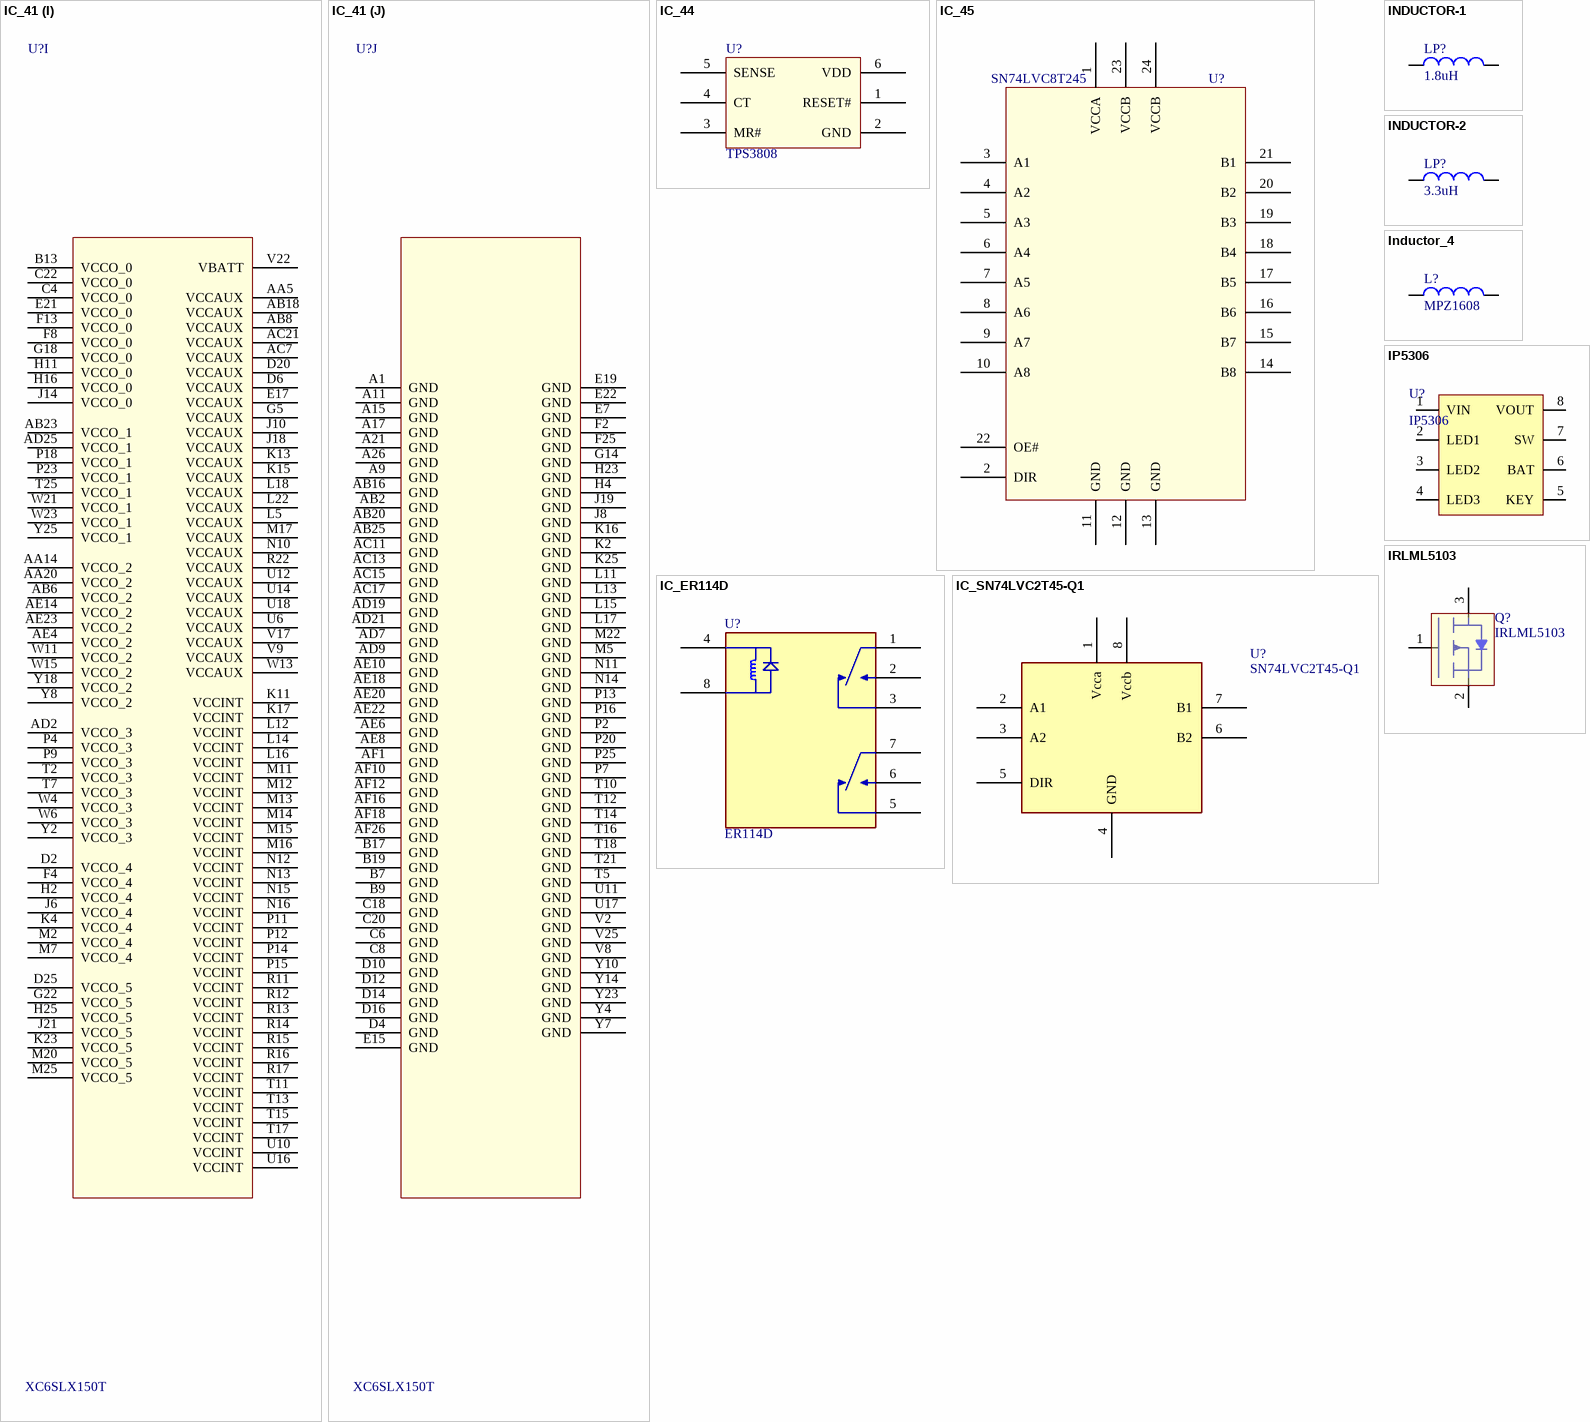
[diagram p16: symbols IC_41 to IRLML5103]

## IC_41
designator U?, comment XC6SLX150T
FPGA_XC6SLX150T; Manufacturer: Xilinx Inc.; Manufacturer Part Number: XC6SLX150T-3FGG676I; Package: 676-BGA; Supplier: Digi-Key; Supplier Part Number: 122-1726-ND; Value: XC6SLX150T; Operating Temperature: -40°C ~ 100°C (TJ)
footprint 676-BGA (BGA, 676-Leads, Body 27x27mm, Pitch 1mm)
part A pins: A2 IO_L14N_0, A3 IO_L14P_0, A4 IO_L22N_0, A5 IO_L24N_0, A12 IO_L36N_GCLK14_0, A13 IO_L35N_GCLK16_0, A14 IO_L37N_GCLK12_0, A22 IO_L63N_SCP6_0, A23 IO_L65N_SCP2_0, B3 IO_L4N_0, B4 IO_L22P_0, B5 IO_L24P_0, B12 IO_L36P_GCLK15_0, B14 IO_L37P_GCLK13_0, B21 IO_L59N_0, B22 IO_L63P_SCP7_0, B23 IO_L65P_SCP3_0, C3 IO_L4P_0, C5 IO_L16N_0, C13 IO_L35P_GCLK17_0, C21 IO_L59P_0, D5 IO_L16P_0, D13 IO_L34N_GCLK18_0, D21 IO_L66P_SCP1_0, D22 IO_L66N_SCP0_0, E5 IO_L8N_VREF_0, E6 IO_L8P_0, E8 IO_L15N_0, E10 IO_L23N_0, E12 IO_L31N_0, E13 IO_L34P_GCLK19_0, E14 IO_L40N_0, E16 IO_L49N_0, E18 IO_L51N_0, E20 IO_L57N_0, F5 IO_L5N_0, F6 IO_L3N_0, F7 IO_L3P_0, F9 IO_L15P_0, F10 IO_L23P_0, F11 IO_L30N_0, F12 IO_L31P_0, F14 IO_L40P_0, F15 IO_L50N_0, F16 IO_L49P_0, F17 IO_L56N_0, F18 IO_L51P_0, F19 IO_L64N_SCP4_0, F20 IO_L57P_0, G6 IO_L5P_0, G7 IO_L1N_VREF_0, G8 IO_L2N_0, G9 IO_L13N_0, G10 IO_L21N_0, G11 IO_L32N_0, G12 IO_L30P_0, G13 IO_L33N_0, G15 IO_L50P_0, G16 IO_L56P_0, G17 IO_L58N_0, G19 IO_L64P_SCP5_0, H7 IO_L1P_HSWAPEN_0, H8 IO_L2P_0, H9 IO_L13P_0, H10 IO_L21P_0, H12 IO_L33P_0, H13 IO_L39N_0, H14 IO_L41N_0, H15 IO_L43N_0, H17 IO_L58P_0, H18 IO_L62P_0, H19 IO_L62N_VREF_0, J11 IO_L32P_0, J12 IO_L38N_VREF_0, J13 IO_L39P_0, J15 IO_L43P_0, J16 IO_L48P_0, J17 IO_L48N_0, K12 IO_L38P_0, K14 IO_L41P_0
part B pins: AA23 IO_L67P_1, AA24 IO_L67N_1, AA25 IO_L47P_FWE_B_M1DQ0_1, AA26 IO_L47N_LDC_M1DQ1_1, AB24 IO_L49P_M1DQ10_1, AB26 IO_L49N_M1DQ11_1, AC23 IO_L74P_AWAKE_1, AC24 IO_L74N_DOUT_BUSY_1, AC25 IO_L50P_M1UDQS_1, AC26 IO_L50N_M1UDQSN_1, AD24 IO_L48P_HDC_M1DQ8_1, AD26 IO_L48N_M1DQ9_1, AE25 IO_L52P_M1DQ14_1, AE26 IO_L52N_M1DQ15_1, L23 IO_L29P_A23_M1A13_1, L24 IO_L29N_A22_M1A14_1, N17 IO_L28P_1, N18 IO_L28N_VREF_1, N19 IO_L30P_A21_M1RESET_1, N20 IO_L30N_A20_M1A11_1, N21 IO_L31P_A19_M1CKE_1, N22 IO_L31N_A18_M1A12_1, N23 IO_L33P_A15_M1A10_1, N24 IO_L33N_A14_M1A4_1, P17 IO_L32P_A17_M1A8_1, P19 IO_L32N_A16_M1A9_1, P21 IO_L35P_A11_M1A7_1, P22 IO_L35N_A10_M1A2_1, P24 IO_L37P_A7_M1A0_1, P26 IO_L37N_A6_M1A1_1, R18 IO_L34P_A13_M1WE_1, R19 IO_L34N_A12_M1BA2_1, R20 IO_L36P_A9_M1BA0_1, R21 IO_L36N_A8_M1BA1_1, R23 IO_L38P_A5_M1CLK_1, R24 IO_L38N_A4_M1CLKN_1, R25 IO_L41P_GCLK9_IRDY1_M1RASN_1, R26 IO_L41N_GCLK8_M1CASN_1, T19 IO_L66P_1, T20 IO_L66N_1, T22 IO_L39P_M1A3_1, T23 IO_L39N_M1ODT_1, T24 IO_L44P_A3_M1DQ6_1, T26 IO_L44N_A2_M1DQ7_1, U19 IO_L68P_1, U20 IO_L68N_1, U21 IO_L53P_1, U22 IO_L53N_VREF_1, U23 IO_L40P_GCLK11_M1A5_1, U24 IO_L40N_GCLK10_M1A6_1, U25 IO_L43P_GCLK5_M1DQ4_1, U26 IO_L43N_GCLK4_M1DQ5_1, V20 IO_L69P_1, V21 IO_L69N_VREF_1, V23 IO_L42P_GCLK7_M1UDM_1, V24 IO_L45P_A1_M1LDQS_1, V26 IO_L45N_A0_M1LDQSN_1, W24 IO_L42N_GCLK6_TRDY1_M1LDM_1, W25 IO_L46P_FCS_B_M1DQ2_1, W26 IO_L46N_FOE_B_M1DQ3_1, Y24 IO_L51P_M1DQ12_1, Y26 IO_L51N_M1DQ13_1
part C pins: AA6 IO_L64N_D9_2, AA7 IO_L64P_D8_2, AA8 IO_L52N_2, AA9 IO_L47P_2, AA10 IO_L48P_D7_2, AA11 IO_L41N_VREF_2, AA12 IO_L33N_2, AA13 IO_L36N_2, AA15 IO_L28P_2, AA16 IO_L24N_VREF_2, AA17 IO_L16N_VREF_2, AA18 IO_L20P_2, AA19 IO_L18P_2, AA21 IO_L15P_2, AA22 IO_L2N_CMPMOSI_2, AB7 IO_L53P_2, AB9 IO_L47N_2, AB11 IO_L48N_RDWR_B_VREF_2, AB13 IO_L36P_2, AB14 IO_L30P_GCLK1_D13_2, AB15 IO_L28N_2, AB17 IO_L20N_2, AB19 IO_L18N_2, AB21 IO_L15N_2, AB22 IO_L5P_2, AC5 IO_L61P_2, AC6 IO_L53N_2, AC14 IO_L30N_GCLK0_USERCCLK_2, AC22 IO_L5N_2, AD4 IO_L63P_2, AD5 IO_L61N_VREF_2, AD6 IO_L49P_D3_2, AD14 IO_L32P_GCLK29_2, AE5 IO_L51P_2, AE13 IO_L31P_GCLK31_D14_2, AE15 IO_L29P_GCLK3_2, AF3 IO_L65N_CSO_B_2, AF4 IO_L63N_2, AF5 IO_L51N_2, AF6 IO_L49N_D4_2, AF13 IO_L31N_GCLK30_D15_2, AF14 IO_L32N_GCLK28_2, AF15 IO_L29N_GCLK2_2, AF22 IO_L13N_D10_2, AF23 IO_L3N_MOSI_CSI_B_MISO0_2, U13 IO_L27P_2, U15 IO_L17P_2, V10 IO_L46N_2, V11 IO_L46P_2, V12 IO_L35P_2, V13 IO_L27N_2, V14 IO_L26P_2, V15 IO_L26N_2, V16 IO_L17N_2, V18 IO_L12P_D1_MISO2_2, W7 IO_L62N_D6_2, W8 IO_L62P_D5_2, W9 IO_L50N_2, W10 IO_L50P_2, W12 IO_L35N_2, W14 IO_L34P_2, W16 IO_L19P_2, W17 IO_L14P_D11_2, W18 IO_L14N_D12_2, W19 IO_L12N_D2_MISO3_2, W20 IO_L4P_2, Y9 IO_L52P_2, Y11 IO_L41P_2, Y12 IO_L33P_2, Y13 IO_L34N_2, Y15 IO_L24P_2, Y16 IO_L19N_2, Y17 IO_L16P_2, Y20 IO_L4N_VREF_2, Y21 IO_L2P_CMPCLK_2
part D pins: AA1 IO_L36N_M3DQ9_3, AA2 IO_L36P_M3DQ8_3, AA3 IO_L2N_3, AA4 IO_L2P_3, AB1 IO_L32N_M3DQ15_3, AB3 IO_L32P_M3DQ14_3, AB4 IO_L8P_3, AB5 IO_L1P_3, AC1 IO_L34N_M3UDQSN_3, AC2 IO_L34P_M3UDQS_3, AC3 IO_L8N_3, AC4 IO_L1N_VREF_3, AD1 IO_L33N_M3DQ13_3, AD3 IO_L33P_M3DQ12_3, AE1 IO_L35N_M3DQ11_3, AE2 IO_L35P_M3DQ10_3, M9 IO_L57N_VREF_3, M10 IO_L57P_3, N4 IO_L54N_M3A11_3, N5 IO_L54P_M3RESET_3, N6 IO_L49P_M3A7_3, N7 IO_L51N_M3A4_3, N8 IO_L51P_M3A10_3, N9 IO_L55N_M3A14_3, P1 IO_L48N_M3BA1_3, P3 IO_L48P_M3BA0_3, P5 IO_L50P_M3WE_3, P6 IO_L49N_M3A2_3, P8 IO_L53N_M3A12_3, P10 IO_L55P_M3A13_3, R1 IO_L44N_GCLK20_M3A6_3, R2 IO_L44P_GCLK21_M3A5_3, R3 IO_L52N_M3A9_3, R4 IO_L52P_M3A8_3, R5 IO_L50N_M3BA2_3, R6 IO_L43N_GCLK22_IRDY2_M3CASN_3, R7 IO_L43P_GCLK23_M3RASN_3, R8 IO_L45P_M3A3_3, R9 IO_L53P_M3CKE_3, R10 IO_L47P_M3A0_3, T1 IO_L41N_GCLK26_M3DQ5_3, T3 IO_L41P_GCLK27_M3DQ4_3, T4 IO_L46N_M3CLKN_3, T6 IO_L31N_VREF_3, T8 IO_L45N_M3ODT_3, T9 IO_L47N_M3A1_3, U1 IO_L40N_M3DQ7_3, U2 IO_L40P_M3DQ6_3, U3 IO_L10N_3, U4 IO_L10P_3, U5 IO_L46P_M3CLK_3, U7 IO_L31P_3, U8 IO_L18N_3, U9 IO_L18P_3, V1 IO_L39N_M3LDQSN_3, V3 IO_L39P_M3LDQS_3, V4 IO_L42P_GCLK25_TRDY2_M3UDM_3, V5 IO_L17P_3, V6 IO_L9N_3, V7 IO_L9P_3, W1 IO_L38N_M3DQ3_3, W2 IO_L38P_M3DQ2_3, W3 IO_L42N_GCLK24_M3LDM_3, W5 IO_L17N_VREF_3, Y1 IO_L37N_M3DQ1_3, Y3 IO_L37P_M3DQ0_3, Y5 IO_L7N_3, Y6 IO_L7P_3
part E pins: B1 IO_L75N_M4BA1_4, B2 IO_L75P_M4BA0_4, C1 IO_L79N_M4A9_4, C2 IO_L79P_M4A8_4, D1 IO_L68N_M4DQ5_4, D3 IO_L68P_M4DQ4_4, E1 IO_L67N_M4DQ7_4, E2 IO_L67P_M4DQ6_4, E3 IO_L81N_M4A11_4, E4 IO_L81P_M4RESET_4, F1 IO_L66N_M4LDQSN_4, F3 IO_L66P_M4LDQS_4, G1 IO_L65N_M4DQ3_4, G2 IO_L65P_M4DQ2_4, G3 IO_L77N_M4BA2_4, G4 IO_L77P_M4WE_4, H1 IO_L64N_M4DQ1_4, H3 IO_L64P_M4DQ0_4, H5 IO_L83N_VREF_4, H6 IO_L83P_4, J1 IO_L63N_M4DQ9_4, J2 IO_L63P_M4DQ8_4, J3 IO_L69N_M4LDM_4, J4 IO_L69P_M4UDM_4, J5 IO_L73N_M4CLKN_4, J7 IO_L78N_M4A4_4, J9 IO_L78P_M4A10_4, K1 IO_L62N_M4DQ11_4, K3 IO_L62P_M4DQ10_4, K5 IO_L73P_M4CLK_4, K6 IO_L82N_M4A14_4, K7 IO_L82P_M4A13_4, K8 IO_L80N_M4A12_4, K9 IO_L80P_M4CKE_4, K10 IO_L76N_M4A2_4, L1 IO_L61N_M4UDQSN_4, L2 IO_L61P_M4UDQS_4, L3 IO_L71N_M4A6_4, L4 IO_L71P_M4A5_4, L6 IO_L74N_M4A1_4, L7 IO_L74P_M4A0_4, L8 IO_L70N_M4CASN_4, L9 IO_L70P_M4RASN_4, L10 IO_L76P_M4A7_4, M1 IO_L60N_M4DQ13_4, M3 IO_L60P_M4DQ12_4, M4 IO_L58P_4, M6 IO_L72N_M4ODT_4, M8 IO_L72P_M4A3_4, N1 IO_L59N_M4DQ15_4, N2 IO_L59P_M4DQ14_4, N3 IO_L58N_VREF_4
part F pins: A25 IO_L2N_M5A14_5, B24 IO_L2P_M5A13_5, B25 IO_L11P_M5CLK_5, B26 IO_L11N_M5CLKN_5, C24 IO_L4N_M5A12_5, C25 IO_L10P_M5A0_5, C26 IO_L10N_M5A1_5, D23 IO_L4P_M5CKE_5, D24 IO_L17P_M5DQ6_5, D26 IO_L17N_M5DQ7_5, E23 IO_L8P_M5A7_5, E24 IO_L8N_M5A2_5, E25 IO_L16P_M5DQ4_5, E26 IO_L16N_M5DQ5_5, F22 IO_L6P_M5A10_5, F23 IO_L14P_M5RASN_5, F24 IO_L18P_M5LDQS_5, F26 IO_L18N_M5LDQSN_5, G20 IO_L1N_A24_VREF_5, G23 IO_L6N_M5A4_5, G24 IO_L14N_M5CASN_5, G25 IO_L20P_M5DQ0_5, G26 IO_L20N_M5DQ1_5, H20 IO_L1P_A25_5, H21 IO_L5P_M5A8_5, H22 IO_L5N_M5A9_5, H24 IO_L19P_M5DQ2_5, H26 IO_L19N_M5DQ3_5, J20 IO_L7P_M5WE_5, J22 IO_L7N_M5BA2_5, J23 IO_L15P_M5UDM_5, J24 IO_L15N_M5LDM_5, J25 IO_L22P_M5DQ10_5, J26 IO_L22N_M5DQ11_5, K18 IO_L3P_M5RESET_5, K19 IO_L3N_M5A11_5, K20 IO_L9N_M5BA1_5, K21 IO_L12P_M5A3_5, K22 IO_L12N_M5ODT_5, K24 IO_L21P_M5DQ8_5, K26 IO_L21N_M5DQ9_5, L19 IO_L9P_M5BA0_5, L20 IO_L27P_5, L21 IO_L27N_5, L25 IO_L24P_M5DQ12_5, L26 IO_L24N_M5DQ13_5, M18 IO_L13P_M5A5_5, M19 IO_L13N_M5A6_5, M21 IO_L26P_5, M23 IO_L26N_VREF_5, M24 IO_L23P_M5UDQS_5, M26 IO_L23N_M5UDQSN_5, N25 IO_L25P_M5DQ14_5, N26 IO_L25N_M5DQ15_5
part G pins: A6 MGTTXN0_101, A7 MGTAVTTTX_101, A8 MGTTXN1_101, A10 MGTREFCLK0N_101, A16 MGTREFCLK1N_123, A18 MGTTXN0_123, A19 MGTAVTTTX_123, A20 MGTTXN1_123, AB10 MGTRREF_245, AB12 MGTAVTTRCAL_245, AC8 MGTRXP0_245, AC9 MGTAVTTRX_245, AC10 MGTRXP1_245, AC12 MGTREFCLK1P_245, AC16 MGTREFCLK0P_267, AC18 MGTRXP0_267, AC19 MGTAVTTRX_267, AC20 MGTRXP1_267, AD8 MGTRXN0_245, AD10 MGTRXN1_245, AD11 MGTAVCC_245, AD12 MGTREFCLK1N_245, AD13 MGTAVCCPLL1_245, AD15 MGTAVCCPLL0_267, AD16 MGTREFCLK0N_267, AD17 MGTAVCC_267, AD18 MGTRXN0_267, AD20 MGTRXN1_267, AE7 MGTTXP0_245, AE9 MGTTXP1_245, AE11 MGTREFCLK0P_245, AE12 MGTAVCCPLL0_245, AE16 MGTAVCCPLL1_267, AE17 MGTREFCLK1P_267, AE19 MGTTXP0_267, AE21 MGTTXP1_267, AF7 MGTTXN0_245, AF8 MGTAVTTTX_245, AF9 MGTTXN1_245, AF11 MGTREFCLK0N_245, AF17 MGTREFCLK1N_267, AF19 MGTTXN0_267, AF20 MGTAVTTTX_267, AF21 MGTTXN1_267, B6 MGTTXP0_101, B8 MGTTXP1_101, B10 MGTREFCLK0P_101, B11 MGTAVCCPLL0_101, B15 MGTAVCCPLL1_123, B16 MGTREFCLK1P_123, B18 MGTTXP0_123, B20 MGTTXP1_123, C7 MGTRXN0_101, C9 MGTRXN1_101, C10 MGTAVCC_101, C11 MGTREFCLK1N_101, C12 MGTAVCCPLL1_101, C14 MGTAVCCPLL0_123, C15 MGTREFCLK0N_123, C16 MGTAVCC_123, C17 MGTRXN0_123, C19 MGTRXN1_123, D7 MGTRXP0_101, D8 MGTAVTTRX_101, D9 MGTRXP1_101, D11 MGTREFCLK1P_101, D15 MGTREFCLK0P_123, D17 MGTRXP0_123, D18 MGTAVTTRX_123, D19 MGTRXP1_123, E9 MGTRREF_101, E11 MGTAVTTRCAL_101
part H pins: A24 TCK, AD22 IO_L13P_M1_2, AD23 IO_L3P_D0_DIN_MISO_MISO1_2, AE3 IO_L65P_INIT_B_2, AE24 IO_L1P_CCLK_2, AF2 PROGRAM_B_2, AF24 IO_L1N_M0_CMPMISO_2, AF25 DONE_2, C23 TDI, F21 TMS, G21 TDO, V19 RFUSE, W22 VFS, Y19 CMPCS_B_2, Y22 SUSPEND
part I pins: AA5 VCCAUX, AA14 VCCO_2, AA20 VCCO_2, AB6 VCCO_2, AB8 VCCAUX, AB18 VCCAUX, AB23 VCCO_1, AC7 VCCAUX, AC21 VCCAUX, AD2 VCCO_3, AD25 VCCO_1, AE4 VCCO_2, AE14 VCCO_2, AE23 VCCO_2, B13 VCCO_0, C4 VCCO_0, C22 VCCO_0, D2 VCCO_4, D6 VCCAUX, D20 VCCAUX, D25 VCCO_5, E17 VCCAUX, E21 VCCO_0, F4 VCCO_4, F8 VCCO_0, F13 VCCO_0, G5 VCCAUX, G18 VCCO_0, G22 VCCO_5, H2 VCCO_4, H11 VCCO_0, H16 VCCO_0, H25 VCCO_5, J6 VCCO_4, J10 VCCAUX, J14 VCCO_0, J18 VCCAUX, J21 VCCO_5, K4 VCCO_4, K11 VCCINT, K13 VCCAUX, K15 VCCAUX, K17 VCCINT, K23 VCCO_5, L5 VCCAUX, L12 VCCINT, L14 VCCINT, L16 VCCINT, L18 VCCAUX, L22 VCCAUX, M2 VCCO_4, M7 VCCO_4, M11 VCCINT, M12 VCCINT, M13 VCCINT, M14 VCCINT, M15 VCCINT, M16 VCCINT, M17 VCCAUX, M20 VCCO_5, M25 VCCO_5, N10 VCCAUX, N12 VCCINT, N13 VCCINT, N15 VCCINT, N16 VCCINT, P4 VCCO_3, P9 VCCO_3, P11 VCCINT, P12 VCCINT, P14 VCCINT, P15 VCCINT, P18 VCCO_1, P23 VCCO_1, R11 VCCINT, R12 VCCINT, R13 VCCINT, R14 VCCINT, R15 VCCINT, R16 VCCINT, R17 VCCINT, R22 VCCAUX, T2 VCCO_3, T7 VCCO_3, T11 VCCINT, T13 VCCINT, T15 VCCINT, T17 VCCINT, T25 VCCO_1, U6 VCCAUX, U10 VCCINT, U12 VCCAUX, U14 VCCAUX, U16 VCCINT, U18 VCCAUX, V9 VCCAUX, V17 VCCAUX, V22 VBATT, W4 VCCO_3, W6 VCCO_3, W11 VCCO_2, W13 VCCAUX, W15 VCCO_2, W21 VCCO_1, W23 VCCO_1, Y2 VCCO_3, Y8 VCCO_2, Y18 VCCO_2, Y25 VCCO_1
part J pins: A1 GND, A9 GND, A11 GND, A15 GND, A17 GND, A21 GND, A26 GND, AB2 GND, AB16 GND, AB20 GND, AB25 GND, AC11 GND, AC13 GND, AC15 GND, AC17 GND, AD7 GND, AD9 GND, AD19 GND, AD21 GND, AE6 GND, AE8 GND, AE10 GND, AE18 GND, AE20 GND, AE22 GND, AF1 GND, AF10 GND, AF12 GND, AF16 GND, AF18 GND, AF26 GND, B7 GND, B9 GND, B17 GND, B19 GND, C6 GND, C8 GND, C18 GND, C20 GND, D4 GND, D10 GND, D12 GND, D14 GND, D16 GND, E7 GND, E15 GND, E19 GND, E22 GND, F2 GND, F25 GND, G14 GND, H4 GND, H23 GND, J8 GND, J19 GND, K2 GND, K16 GND, K25 GND, L11 GND, L13 GND, L15 GND, L17 GND, M5 GND, M22 GND, N11 GND, N14 GND, P2 GND, P7 GND, P13 GND, P16 GND, P20 GND, P25 GND, T5 GND, T10 GND, T12 GND, T14 GND, T16 GND, T18 GND, T21 GND, U11 GND, U17 GND, V2 GND, V8 GND, V25 GND, Y4 GND, Y7 GND, Y10 GND, Y14 GND, Y23 GND
part A text: Bank_0
part B text: Bank_1
part C text: Bank_2
part D text: Bank_3
part E text: Bank_4
part F text: Bank_5

## IC_44
designator U?, comment TPS3808
Manufacturer: Texas Instruments; Manufacturer Part Number: TPS3808G09DBVR; Package: SOT-23-6; Supplier: Digi-Key; Supplier Part Number: 296-17189-1-ND; Value: TPS3808; Operating Temperature: -40°C ~ 125°C (TJ)
footprint SOT23-6
pins: 1 RESET#, 2 GND, 3 MR#, 4 CT, 5 SENSE, 6 VDD

## IC_45
designator U?, comment SN74LVC8T245
Translation - Voltage Levels AC 8B Dl-Spply Bus Trans; Manufacturer: Texas Instruments; Manufacturer Part Number: SN74LVC8T245QPWRQ1; Value: SN74LVC8T245; Package: TSSOP-24; Supplier: Mouser; Supplier Part Number: 595-74LVC8T245QPWRQ1
footprint TSSOP
pins: 1 VCCA, 2 DIR, 3 A1, 4 A2, 5 A3, 6 A4, 7 A5, 8 A6, 9 A7, 10 A8, 11 GND, 12 GND, 13 GND, 14 B8, 15 B7, 16 B6, 17 B5, 18 B4, 19 B3, 20 B2, 21 B1, 22 OE#, 23 VCCB, 24 VCCB

## IC_ER114D
designator U?, comment ER114D
ER114D---RF Relays DPDT 5VDC 50 ohm w/diode; Manufacturer: Teledyne Relays; Manufacturer Part Number: ER114D-5A; Supplier: Mouser; Supplier Part Number: 881-ER114D-5A; Value: ER114D; Operating Temperature: -65°C ~ 125°C (TA)
footprint ER114D-5A
pins: 1, 2, 3, 4 +, 5, 6, 7, 8 -

## IC_SN74LVC2T45-Q1
designator U?, comment SN74LVC2T45-Q1
SN74LVC2T45-Q1--- IC BUS TRANSCVR 2BIT N-INV US8; Manufacturer: Texas Instruments; Manufacturer Part Number: SN74LVC2T45QDCURQ1; Manufacturer Availability: Active; Value: SN74LVC2T45-Q1; Operating Temperature: -40°C ~ 125°C (TA); Package: 8-VFSOP (0.091", 2.30mm Width); Supplier: Digi-Key; Supplier Part Number: 296-29577-1-ND; Supplier Availability: Active
footprint SN74LVC2T45QDCURQ1
pins: 1 Vcca, 2 A1, 3 A2, 4 GND, 5 DIR, 6 B2, 7 B1, 8 Vccb

## INDUCTOR-1
designator LP?, comment 1.8uH
Fixed Inductors XAL6030 AEC-Q200 1.8 uH 20 % 14 A; Manufacturer: Coilcraft; Manufacturer Part Number: XAL6030-182MEB; Package: SMD/SMT; Supplier: Mouser; Supplier Part Number: 994-XAL6030-182MEB; Unit Price: *; Value: 1.8uH
footprint LP2
pins: 1, 2

## INDUCTOR-2
designator LP?, comment 3.3uH
Fixed Inductors XAL4030 AEC-Q200 3.3 uH 20 % 6.6 A; Manufacturer: Coilcraft; Manufacturer Part Number: XAL4030-332MEB; Package: SMD/SMT; Supplier: Mouser; Supplier Part Number: 994-XAL4030-332MEB; Unit Price: *; Value: 3.3uH
footprint LP1
pins: 1, 2

## Inductor_4
designator L?, comment MPZ1608
FERRITE BEAD 30 OHM 0603 1LN; Manufacturer: TDK Corporation; Manufacturer Part Number: MPZ1608S300ATAH0; Package: 0603 (1608 Metric); Supplier: Digi-Key; Supplier Part Number: 445-1562-1-ND; Value: MPZ1608
footprint CAPC1608L (Chip Capacitor, Body 1.6x0.8mm, IPC High Density)
pins: 1, 2

## IP5306
designator U?
4.65V~5.5V 1 ESOP-8 Battery Management ROHS; Manufacturer: INJOINIC; MPN: C181692; MPN: IP5306; Package: ESOP-8; Supplier: LCSC; Unit Price: *; Value: IP5306
pins: 1 VIN, 2 LED1, 3 LED2, 4 LED3, 5 KEY, 6 BAT, 7 SW, 8 VOUT

## IRLML5103
designator Q?
MOSFET P-CH 30V 760MA SOT-23; Manufacturer: Infineon Technologies; Manufacturer Part Number: IRLML5103TRPBF; Manufacturer Availability: Active; Package: Micro3™/SOT-23; Supplier Part Number: IRLML5103PBFTR-ND; Supplier: Digi-Key; Value: IRLML5103; Operating Temperature: -55°C ~ 150°C (TJ)
footprint IRLML2402GTRPBF
pins: 1, 2, 3

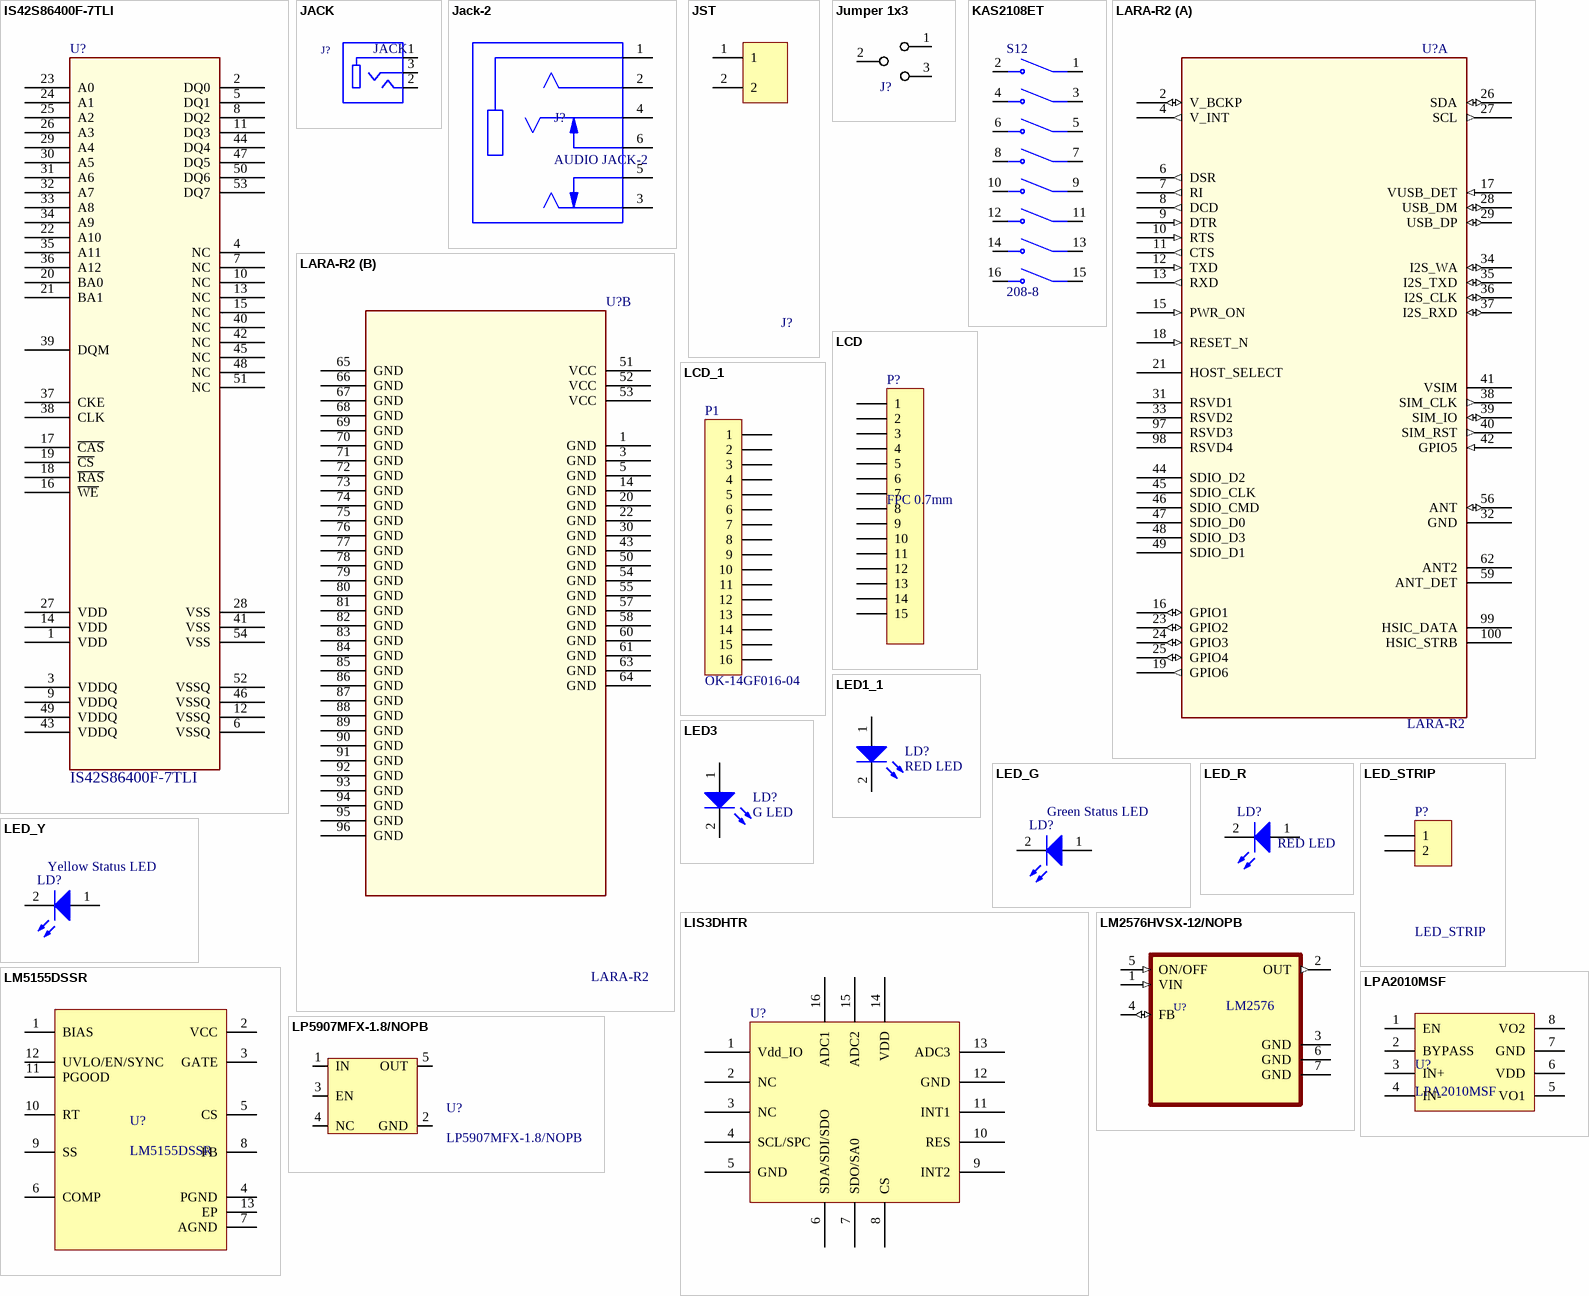
[diagram p17: symbols IS42S86400F-7TLI to LPA2010MSF]

## IS42S86400F-7TLI
designator U?
SDRAM Memory IC 512Mb (32M x 16) Parallel 143MHz 5.4ns 54-TFBGA (8x13); Manufacturer: Integrated Silicon Solution, Inc; TEMP: -40°C ~ 85 °C; Manufacturer Part Number: IS42S86400F-7TLI; Supplier: Mouser; Supplier Part Number: 870-42S86400F7TLI; Price: *; Package: TSOP-54; Value: IS42S86400F-7TLI
footprint IS42S86400F
pins: 1 VDD, 2 DQ0, 3 VDDQ, 4 NC, 5 DQ1, 6 VSSQ, 7 NC, 8 DQ2, 9 VDDQ, 10 NC, 11 DQ3, 12 VSSQ, 13 NC, 14 VDD, 15 NC, 16 ~{WE}, 17 ~{CAS}, 18 ~{RAS}, 19 ~{CS}, 20 BA0, 21 BA1, 22 A10, 23 A0, 24 A1, 25 A2, 26 A3, 27 VDD, 28 VSS, 29 A4, 30 A5, 31 A6, 32 A7, 33 A8, 34 A9, 35 A11, 36 A12, 37 CKE, 38 CLK, 39 DQM, 40 NC, 41 VSS, 42 NC, 43 VDDQ, 44 DQ4, 45 NC, 46 VSSQ, 47 DQ5, 48 NC, 49 VDDQ, 50 DQ6, 51 NC, 52 VSSQ, 53 DQ7, 54 VSS

## JACK
designator J?
CONN JACK STEREO 2.5MM SMD R/A; Manufacturer: CUI Devices; Manufacturer Part Number: SJ-2523-SMT-TR; Package: SMD; Supplier: Digikey; Supplier Part Number: CP-2523SJTR-ND; Temperature: -55 to 155; Value: JACK
footprint Jack
pins: 1, 2, 3

## Jack-2
designator J?, comment AUDIO JACK-2
AUDIO JACK, 3.5 MM, RT, 4 CONDUC; Manufacturer: AliExpress; Manufacturer Part Number: PJ-342; Value: AUDIO JACK-2; Package: SMD; Supplier: AliExpress; Supplier Part Number: https://www.aliexpress.com/item/32305086077.html
pins: 1, 2, 3, 4, 5, 6

## JST
designator J?, comment 2-pin  (value not drawn)
Header 1x10; Manufacturer partnumber: SM02B-GHS-TB(LF)(SN); Manufacturer: JST Sales America Inc.; Value: 2-pin; Supplier Partnumber: 455-1564-2-ND; Supplier: Digi-Key
footprint JST
pins: 1, 2

## Jumper 1x3
designator J?
Jumper 1x3
footprint HDR1X3 (Connector; Header; 6 Position)
pins: 1, 2, 3

## KAS2108ET
designator S12, comment 208-8
Dip Switch SPST 8 Position Through Hole, Right Angle Slide (Standard) Actuator 25mA 24VDC; MF: CTS Electrocomponents; Check_prices: https://www.snapeda.com/parts/KAS2108E/E-Switch/view-part/?ref=eda; Value: *; Availability: In Stock; MP: 208-8; Price: None; Package: None; SnapEDA_Link: https://www.snapeda.com/parts/KAS2108E/E-Switch/view-part/?ref=snap; Purchase-URL: https://pricing.snapeda.com/search/part/KAS2108E/?ref=eda
footprint Switch
pins: 1 COM1, 2 NO1, 3 COM2, 4 NO2, 5 COM3, 6 NO3, 7 COM4, 8 NO4, 9 COM5, 10 NO5, 11 COM6, 12 NO6, 13 COM7, 14 NO7, 15 COM8, 16 NO8

## LARA-R2
designator U?
LTE Cat 1 modules in single and multi-mode configurations; Manufacturer: uBlox; Manufacturer PN: LARA-R211-02B; Life Cycle State: Prototype; Substitution Allowed: No; Rev: B; RoHS Compliant: Yes; Supplier 1: Digi-Key; Supplier 1 PN: 672-LARA-R211-02BCT-ND
part A pins: 2 V_BCKP (io), 4 V_INT (out), 6 DSR (out), 7 RI (out), 8 DCD (out), 9 DTR (in), 10 RTS (in), 11 CTS (out), 12 TXD (in), 13 RXD (out), 15 PWR_ON (in), 16 GPIO1 (io), 17 VUSB_DET (in), 18 RESET_N (in), 19 GPIO6 (out), 21 HOST_SELECT, 23 GPIO2 (io), 24 GPIO3 (io), 25 GPIO4 (io), 26 SDA (io), 27 SCL (out), 28 USB_DM (io), 29 USB_DP (io), 31 RSVD1, 32 GND (power), 33 RSVD2, 34 I2S_WA (io), 35 I2S_TXD (io), 36 I2S_CLK (io), 37 I2S_RXD (io), 38 SIM_CLK (out), 39 SIM_IO (io), 40 SIM_RST (out), 41 VSIM (power), 42 GPIO5 (in), 44 SDIO_D2, 45 SDIO_CLK, 46 SDIO_CMD, 47 SDIO_D0, 48 SDIO_D3, 49 SDIO_D1, 56 ANT (io), 59 ANT_DET, 62 ANT2, 97 RSVD3, 98 RSVD4, 99 HSIC_DATA, 100 HSIC_STRB
part B pins: 1 GND (power), 3 GND (power), 5 GND (power), 14 GND (power), 20 GND (power), 22 GND (power), 30 GND (power), 43 GND (power), 50 GND (power), 51 VCC (power), 52 VCC (power), 53 VCC (power), 54 GND (power), 55 GND (power), 57 GND (power), 58 GND (power), 60 GND (power), 61 GND (power), 63 GND (power), 64 GND (power), 65 GND (power), 66 GND (power), 67 GND (power), 68 GND (power), 69 GND (power), 70 GND (power), 71 GND (power), 72 GND (power), 73 GND (power), 74 GND (power), 75 GND (power), 76 GND (power), 77 GND (power), 78 GND (power), 79 GND (power), 80 GND (power), 81 GND (power), 82 GND (power), 83 GND (power), 84 GND (power), 85 GND (power), 86 GND (power), 87 GND (power), 88 GND (power), 89 GND (power), 90 GND (power), 91 GND (power), 92 GND (power), 93 GND (power), 94 GND (power), 95 GND (power), 96 GND (power)

## LCD
designator P?, comment FPC 0.7mm
Header 4; Value: FPC 0.7mm
pins: 1, 2, 3, 4, 5, 6, 7, 8, 9, 10, 11, 12, 13, 14, 15

## LCD_1
designator P1, comment OK-14GF016-04
Header 4; Manufacturer Part Number: OK-14GF016-04; Value: OK-14GF016-04
footprint LCD-CONNECTOR
pins: 1, 2, 3, 4, 5, 6, 7, 8, 9, 10, 11, 12, 13, 14, 15, 16

## LED1_1
designator LD?, comment RED LED
Standard LEDs - SMD Super Red, 630nm 13mcd, 2mA; Manufacturer Part Number: LS L29K-G1H2-1-Z; Manufacturer: OSRAM Opto Semiconductors; Package: 0603 (1608 Metric); Value: RED LED; Supplier Part Number: 720-LSL29K-G1H2-1-Z; Supplier: Mouser
footprint CAPC1608L (Chip Capacitor, Body 1.6x0.8mm, IPC High Density)
pins: 1 A, 2 K

## LED3
designator LD?, comment G LED
Green LED SMT; Manufacturer Part Number: LP L296-J2L2-25-Z; Manufacturer: OSRAM Opto Semiconductors; Package: 0603 (1608 Metric); Supplier Part Number: 720-LPL296J2L225Z; Value: G LED; Supplier: Mouser; Operating Temperature: -40°C ~ 100°C
footprint LED_1608L (Chip Capacitor, Body 1.6x0.8mm, IPC High Density)
pins: 1 A, 2 K

## LED_G
designator LD?, comment Green Status LED
Manufacturer: Lite-On; Manufacturer Part Number: LTL-4236N; Package: Through Hole_T-1 (3 mm); Value: Green Status LED; Supplier: Mouser; Supplier Part Number: 859-LTL-4236N
footprint LED-TH
pins: 1 A, 2 K

## LED_R
designator LD?, comment RED LED
Manufacturer Part Number: LTL-4222N; Manufacturer: Lite-On; Package: Through Hole; Supplier Part Number: 859-LTL-4222N; Value: RED LED; Supplier: Mouser
footprint LED-TH
pins: 1 A, 2 K

## LED_STRIP
designator P?
Through Hole,P=2.54mm; Manufacturer: DORABO; Manufacturer Part Number: DB125-2.54-2P-GN-S; Package: TH; Supplier: LCSC; Supplier Part Number: C918120; Value: LED_STRIP
footprint LED-STRIP
pins: 1, 2

## LED_Y
designator LD?, comment Yellow Status LED
Manufacturer: Lite-On; Manufacturer Part Number: LTL-1CHYE; Package: Through Hole_T-1 (3 mm); Value: Yellow Status LED; Supplier: Mouser; Supplier Part Number: 859-LTL-1CHYE
footprint LED-TH
pins: 1 A, 2 K

## LIS3DHTR
designator U?
Sensor: acceleration; Range: ±16g; 1.71÷3.6VDC; -40÷85°C; Manufacturer: STMicroelectronics; SPN: C15134; Manufacturer Part Number: LIS3DHTR; Supplier: LCSC; Value: LIS3DHTR
pins: 1 Vdd_IO, 2 NC, 3 NC, 4 SCL/SPC, 5 GND, 6 SDA/SDI/SDO, 7 SDO/SA0, 8 CS, 9 INT2, 10 RES, 11 INT1, 12 GND, 13 ADC3, 14 VDD, 15 ADC2, 16 ADC1

## LM2576HVSX-12/NOPB
designator U?, comment LM2576
IC REG BUCK 12V 3A TO263-5; Manufacturer: Texas Instruments; Manufacturer Part Number: LM2576HVSX-12/NOPB; Package: TO263-5; Supplier: Digi-Key; Supplier Part Number: 296-35394-2-ND; Value: LM2576
pins: 1 VIN (in), 2 OUT (out), 3 GND (power), 4 FB (io), 5 ON/OFF (in), 6 GND (power), 7 GND (power)

## LM5155DSSR
designator U?
2.2-MHz wide VIN, 1.5-A MOSFET driver, non-synchronous boost controller; SPN: C545416; MF: Texas Instruments; Package: WSON-12 Texas Instruments; Value: LM5155DSSR; MPN: LM5155DSSR
footprint IC_LM5155DSSR
pins: 1 BIAS, 2 VCC, 3 GATE, 4 PGND, 5 CS, 6 COMP, 7 AGND, 8 FB, 9 SS, 10 RT, 11 PGOOD, 12 UVLO/EN/SYNC, 13 EP

## LP5907MFX-1.8/NOPB
designator U?
90dB 250mA Fixed 1.8V Positive electrode 5.5V SOT-23-5 Linear Voltage Regulators (LDO) ROHS; Manufacturer: Texas Instruments; SPN: C92498; MPN: LP5907MFX-1.8/NOPB; Package: SOT-23-5; Supplier: LCSC; Value: LP5907MFX-1.8/NOPB
pins: 1 IN, 2 GND, 3 EN, 4 NC, 5 OUT

## LPA2010MSF
designator U?
MSOP-8 Audio Power OpAmps RoHS; Manufacturer: LOWPOWER; Manufacturer Part Number: LPA2010MSF; Package: MSOP-8; Supplier: LCSC; Supplier Part Number: C387737; Value: LPA2010MSF
pins: 1 EN, 2 BYPASS, 3 IN+, 4 IN-, 5 VO1, 6 VDD, 7 GND, 8 VO2

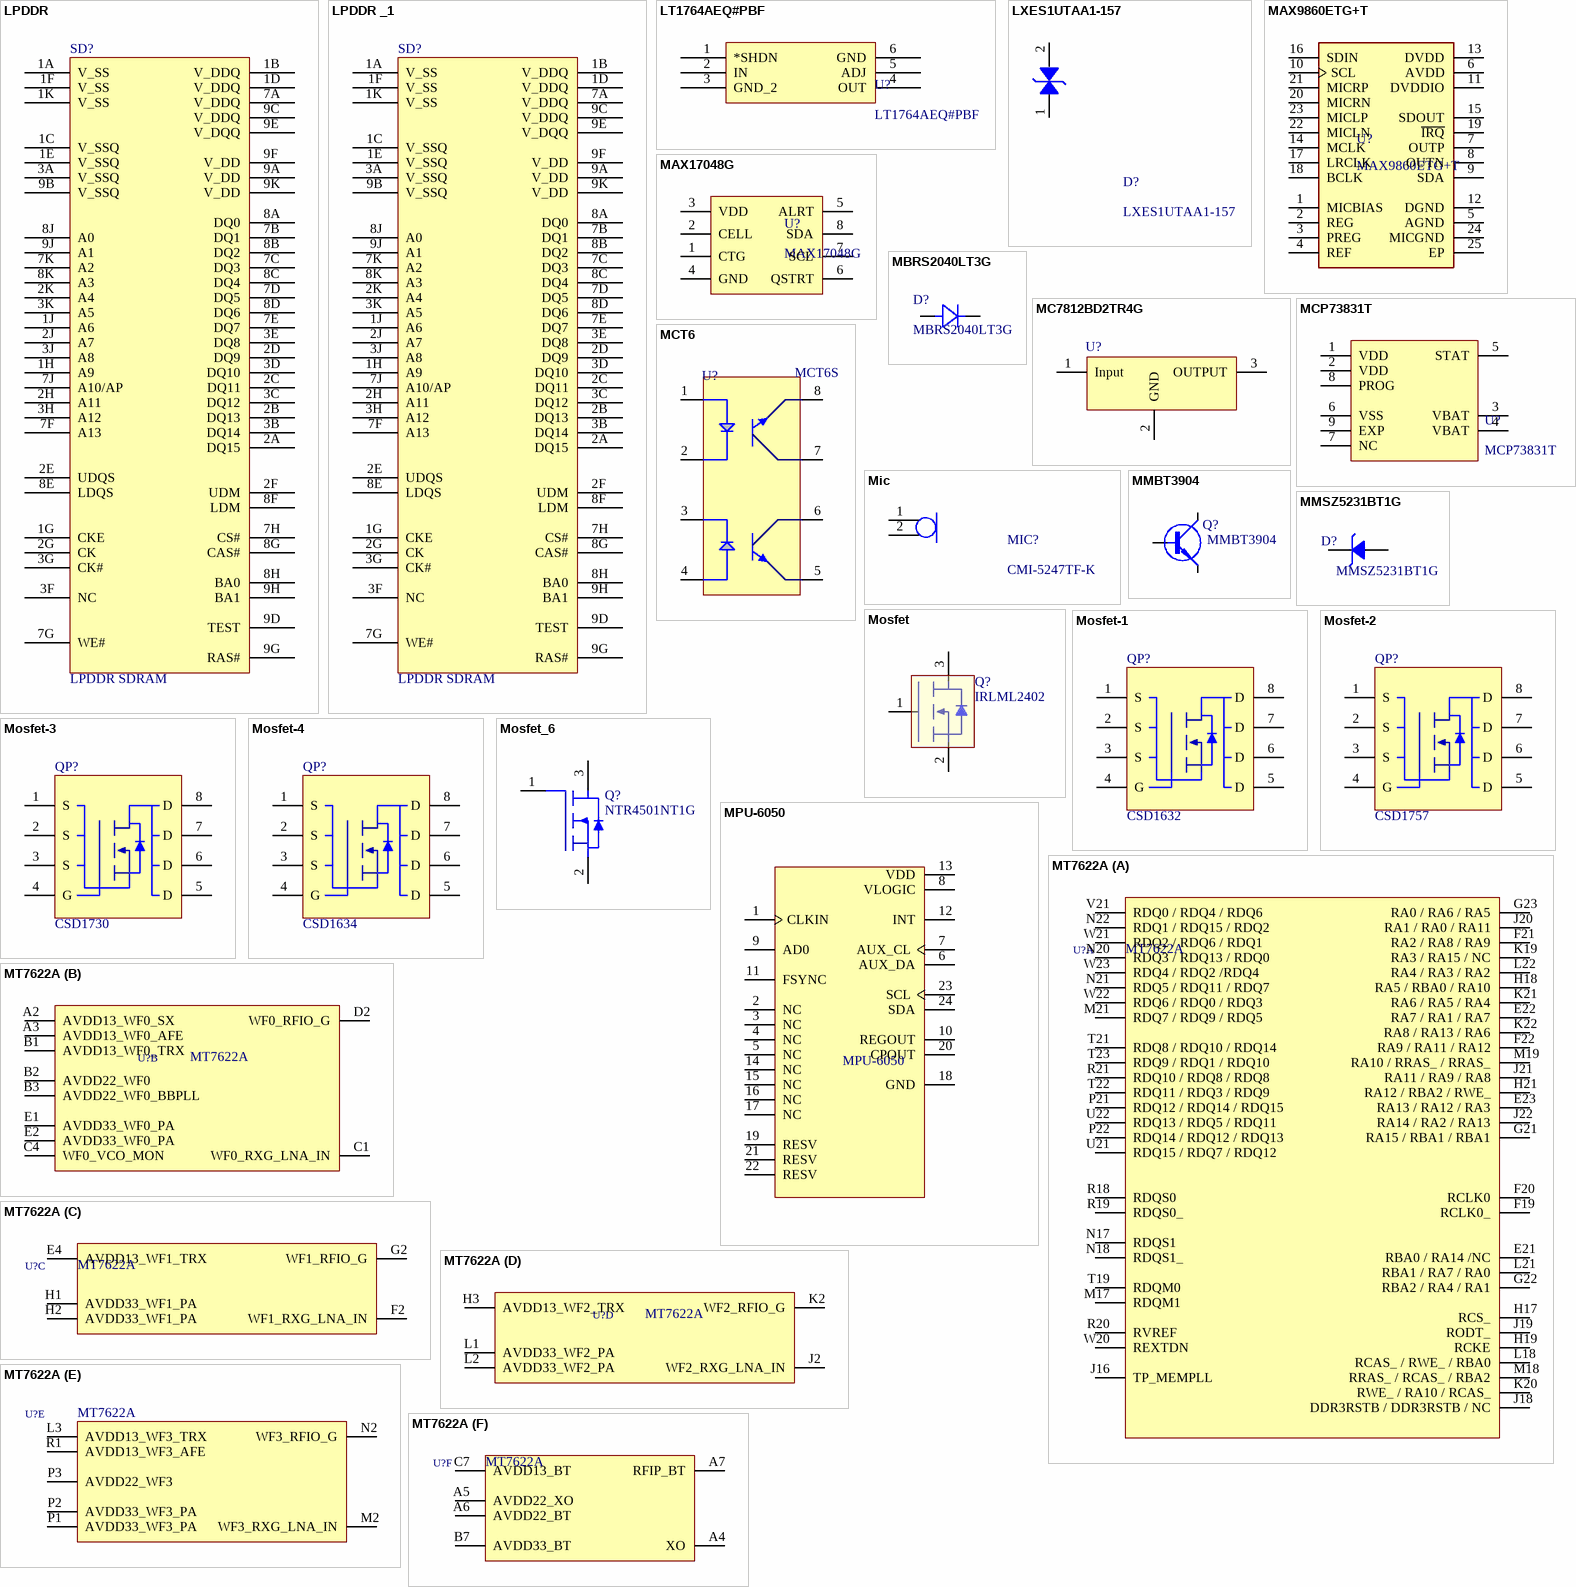
[diagram p18: symbols LPDDR to MT7622A]

## LPDDR
designator SD?, comment LPDDR SDRAM
SDRAM - Mobile LPDDR Memory IC 512Mb (32M x 16) Parallel 200MHz 5ns 60-VFBGA (8x9); Manufacturer: Micron Technology; Manufacturer Part Number: MT46H32M16LFBF-5 IT:C TR; Value: 512Mb LPDDR SDRAM; Package: 60-VFBGA (8x9); Supplier: Digi-Key; Supplier Part Number: 557-1904-1-ND
footprint SDRAM_BGA91x10
pins: 1A V_SS, 1B V_DDQ, 1C V_SSQ, 1D V_DDQ, 1E V_SSQ, 1F V_SS, 1G CKE, 1H A9, 1J A6, 1K V_SS, 2A DQ15, 2B DQ13, 2C DQ11, 2D DQ9, 2E UDQS, 2F UDM, 2G CK, 2H A11, 2J A7, 2K A4, 3A V_SSQ, 3B DQ14, 3C DQ12, 3D DQ10, 3E DQ8, 3F NC, 3G CK#, 3H A12, 3J A8, 3K A5, 7A V_DDQ, 7B DQ1, 7C DQ3, 7D DQ5, 7E DQ7, 7F A13, 7G WE#, 7H CS#, 7J A10/AP, 7K A2, 8A DQ0, 8B DQ2, 8C DQ4, 8D DQ6, 8E LDQS, 8F LDM, 8G CAS#, 8H BA0, 8J A0, 8K A3, 9A V_DD, 9B V_SSQ, 9C V_DDQ, 9D TEST, 9E V_DQQ, 9F V_DD, 9G RAS#, 9H BA1, 9J A1, 9K V_DD

## LPDDR _1
designator SD?, comment LPDDR SDRAM
SDRAM - Mobile LPDDR Memory IC 512Mb (32M x 16) Parallel 200MHz 5ns 60-VFBGA (8x9); Manufacturer: Micron Technology; Manufacturer Part Number: MT46H32M16LFBF-5 IT:C TR; Value: 512Mb LPDDR SDRAM; Package: 60-VFBGA (8x9); Supplier: Digi-Key; Supplier Part Number: 557-1904-1-ND
footprint SDRAM_BGA91x10
pins: 1A V_SS, 1B V_DDQ, 1C V_SSQ, 1D V_DDQ, 1E V_SSQ, 1F V_SS, 1G CKE, 1H A9, 1J A6, 1K V_SS, 2A DQ15, 2B DQ13, 2C DQ11, 2D DQ9, 2E UDQS, 2F UDM, 2G CK, 2H A11, 2J A7, 2K A4, 3A V_SSQ, 3B DQ14, 3C DQ12, 3D DQ10, 3E DQ8, 3F NC, 3G CK#, 3H A12, 3J A8, 3K A5, 7A V_DDQ, 7B DQ1, 7C DQ3, 7D DQ5, 7E DQ7, 7F A13, 7G WE#, 7H CS#, 7J A10/AP, 7K A2, 8A DQ0, 8B DQ2, 8C DQ4, 8D DQ6, 8E LDQS, 8F LDM, 8G CAS#, 8H BA0, 8J A0, 8K A3, 9A V_DD, 9B V_SSQ, 9C V_DDQ, 9D TEST, 9E V_DQQ, 9F V_DD, 9G RAS#, 9H BA1, 9J A1, 9K V_DD

## LT1764AEQ#PBF
designator U?
IC REG LINEAR POS ADJ 3A 5DDPAK; Manufacturer: Analog Devices Inc.; Manufacturer Part Number: LT1764AEQ#PBF; Package: 5DDPAK; Supplier: Digi-Key; Supplier Part Number: LT1764AEQ#PBF-ND; Value: LT1764AEQ#PBF
footprint DDPAK-5_Q
pins: 1 *SHDN, 2 IN, 3 GND_2 (power), 4 OUT, 5 ADJ, 6 GND (power)

## LXES1UTAA1-157
designator D?
ESD Suppressors / TVS Diodes ESD Protection Devices DFN 0402 0.5pF VBR7V; Manufacturer: Murata Electronics; SPN: 81-LXES1UTAA1-157; MPN: LXES1UTAA1-157; Package: 0201 (0603 Metric); Supplier: Mouser; Value: LXES1UTAA1-157
footprint LXES1UTAA1157
pins: 1, 2

## MAX9860ETG+T
designator U?
IC CODEC MONO AUD 16BIT 24TQFN; Manufacturer: Maxim Integrated; Manufacturer Part Number: MAX9860ETG+T; Package: 24TQFN; Supplier: Digi-Key; Supplier Part Number: MAX9860ETG+TTR-ND; Unit Price: *; Value: MAX9860ETG+T
footprint MAX986
pins: 1 MICBIAS, 2 REG, 3 PREG, 4 REF, 5 AGND, 6 AVDD, 7 OUTP, 8 OUTN, 9 SDA, 10 SCL, 11 DVDDIO, 12 DGND, 13 DVDD, 14 MCLK, 15 SDOUT, 16 SDIN, 17 LRCLK, 18 BCLK, 19 ~{IRQ}, 20 MICRN, 21 MICRP, 22 MICLN, 23 MICLP, 24 MICGND, 25 EP

## MAX17048G
designator U?
Lithium-ion/Polymer 1 DFN-8-EP(2x2) Battery Management ICs ROHS; Manufacturer: Analog Devices Inc./Maxim Integrated; MPN: MAX17048G+T10; SPN: C2682616; Package: DFN-8-EP(2x2); Supplier: LCSC; Value: MAX17048G
pins: 1 CTG, 2 CELL, 3 VDD, 4 GND, 5 ALRT, 6 QSTRT, 7 SCL, 8 SDA

## MBRS2040LT3G
designator D?
DIODE SCHOTTKY 40V SMB(DO-214AA); Manufacturer_Name: onsemi; SPN: C59626; Manufacturer_Part_Number: MBRS2040LT3G; Package: SMB(DO-214AA)
footprint CR_40LT3G_ONS
pins: 1, 2

## MC7812BD2TR4G
designator U?
IC REG LINEAR 12V 1A D2PAK; Manufacturer: ON Semiconductor; Manufacturer Part Number: MC7812BD2TR4G; Package: TO-263-3, D²Pak (2 Leads + Tab), TO-263AB; Supplier: Digi-Key; Supplier Part Number: MC7812BD2TR4GOSCT-ND
footprint 12V regulator
pins: 1 Input, 2 GND, 3 OUTPUT

## MCP73831T
designator U?
IC BATT CONTRL LI-ION 1CELL 8DFN; Manufacturer: MICROCHIP; Manufacturer Part Number: MCP73831T-2DCI/MC; Package: SOT-23-5; Supplier: LCSC; Supplier Part Number: C623847; Value: MCP73831T
footprint MCP7383
pins: 1 VDD, 2 VDD, 3 VBAT, 4 VBAT, 5 STAT, 6 VSS, 7 NC, 8 PROG, 9 EXP

## MCT6
designator U?, comment MCT6S
Transistor Output Optocouplers SO-8 DUAL PH TRAN; Manufacturer: ON Semiconductor / Fairchild; Manufacturer Part Number: MCT6S; Package: SMD/SMT; Supplier: Mouser; Supplier Part Number: 512-MCT6S; Unit Price: *; Value: MCT6S
footprint GULWING
pins: 1, 2, 3, 4, 5, 6, 7, 8

## Mic
designator MIC?, comment CMI-5247TF-K
Microphones Microphones; Manufacturer: CUI Devices; SPN: 490-CMI-5247TF-K; MPN: CMI-5247TF-K; Package: SMD; Supplier: Mouser; Value: CMI-5247TF-K
pins: 1, 2

## MMBT3904
designator Q?
40V 200mW 100@10mA,1V 200mA NPN SOT-23 Bipolar Transistors - BJT ROHS; Manufacturer: HXY MOSFET; SPN: C5184404; MPN: MMBT3904; Package: SOT-23-3; Supplier: LCSC; Value: MMBT3904
footprint MMBT3904
pins: 1 B, 2 E, 3 C

## MMSZ5231BT1G
designator D?
Single 4.85V~5.36V 500mW 5.1V SOD-123 Zener Diodes ROHS; Manufacturer: onsemi; Manufacturer Part Number: MMSZ5231BT1G; Package: SOD-123; Supplier: LCSC; Supplier Part Number: C66198; Value: MMSZ5231BT1G
pins: 1, 2

## Mosfet
designator Q?, comment IRLML2402
MOSFET N-CH 20V 1.2A SOT-23-3; Manufacturer: Infineon Technologies; Manufacturer Part Number: IRLML2402GTRPBF; Manufacturer Availability: Active; Package: Micro3™/SOT-23; Supplier Part Number: IRLML2402GTRPBFCT-ND; Supplier: Digi-Key; Value: IRLML2402; Operating Temperature: -55°C ~ 150°C (TJ)
footprint IRLML2402GTRPBF
pins: 1, 2, 3

## Mosfet-1
designator QP?, comment CSD1632
MOSFET N-Channel NexFET Pwr MOSFET; Manufacturer: Texas Instruments; Manufacturer Part Number: CSD16327Q3; Package: VSON-Clip-8; Supplier Part Number: 595-CSD16327Q3; Supplier: Mouser; Value: CSD1632
footprint CSDQ3
pins: 1 S, 2 S, 3 S, 4 G, 5 D, 6 D, 7 D, 8 D

## Mosfet-2
designator QP?, comment CSD1757
MOSFET 30V, N-channel NexFET Pwr MOSFET; Manufacturer: Texas Instruments; Manufacturer Part Number: CSD17577Q3A; Package: VSONP-8; Supplier Part Number: 595-CSD17577Q3A; Supplier: Mouser; Value: CSD1757
footprint CSD17577Q3A
pins: 1 S, 2 S, 3 S, 4 G, 5 D, 6 D, 7 D, 8 D

## Mosfet-3
designator QP?, comment CSD1730
MOSFET 30V NCh NexFET Pwr MOSFET; Manufacturer: Texas Instruments; Manufacturer Part Number: CSD17308Q3; Package: VSON-Clip-8; Supplier Part Number: 595-CSD17308Q3; Supplier: Mouser; Value: CSD1730
footprint CSDQ3
pins: 1 S, 2 S, 3 S, 4 G, 5 D, 6 D, 7 D, 8 D

## Mosfet-4
designator QP?, comment CSD1634
MOSFET N Channel NexFET Power MOSFET; Manufacturer: Texas Instruments; Manufacturer Part Number: CSD16340Q3; Package: VSON-Clip-8; Supplier Part Number: 595-CSD16340Q3; Supplier: Mouser; Value: CSD1634
footprint CSDQ3
pins: 1 S, 2 S, 3 S, 4 G, 5 D, 6 D, 7 D, 8 D

## Mosfet_6
designator Q?, comment NTR4501NT1G
MOSFET N-CH 20V 3.2A SOT-23; Manufacturer: ON Semiconductor; Manufacturer Part Number: NTR4501NT1G; Package: SOT-23-3; Supplier Part Number: NTR4501NT1GOSCT-ND; Supplier: Digi-Key; Value: NTR4501NT1G
footprint NTR4501
pins: 1 G, 2 S, 3 D

## MPU-6050
designator U?
Sensor: acceleration; Range: ±16g; 1.71÷3.6VDC; -40÷85°C; Manufacturer: TDK InvenSense; SPN: 1428-1007-1-ND; Manufacturer Part Number: MPU-6050; Supplier: DigiKey; Value: MPU-6050
footprint MPU-6050
pins: 1 CLKIN, 2 NC, 3 NC, 4 NC, 5 NC, 6 AUX_DA, 7 AUX_CL, 8 VLOGIC, 9 AD0, 10 REGOUT, 11 FSYNC, 12 INT, 13 VDD, 14 NC, 15 NC, 16 NC, 17 NC, 18 GND, 19 RESV, 20 CPOUT, 21 RESV, 22 RESV, 23 SCL, 24 SDA

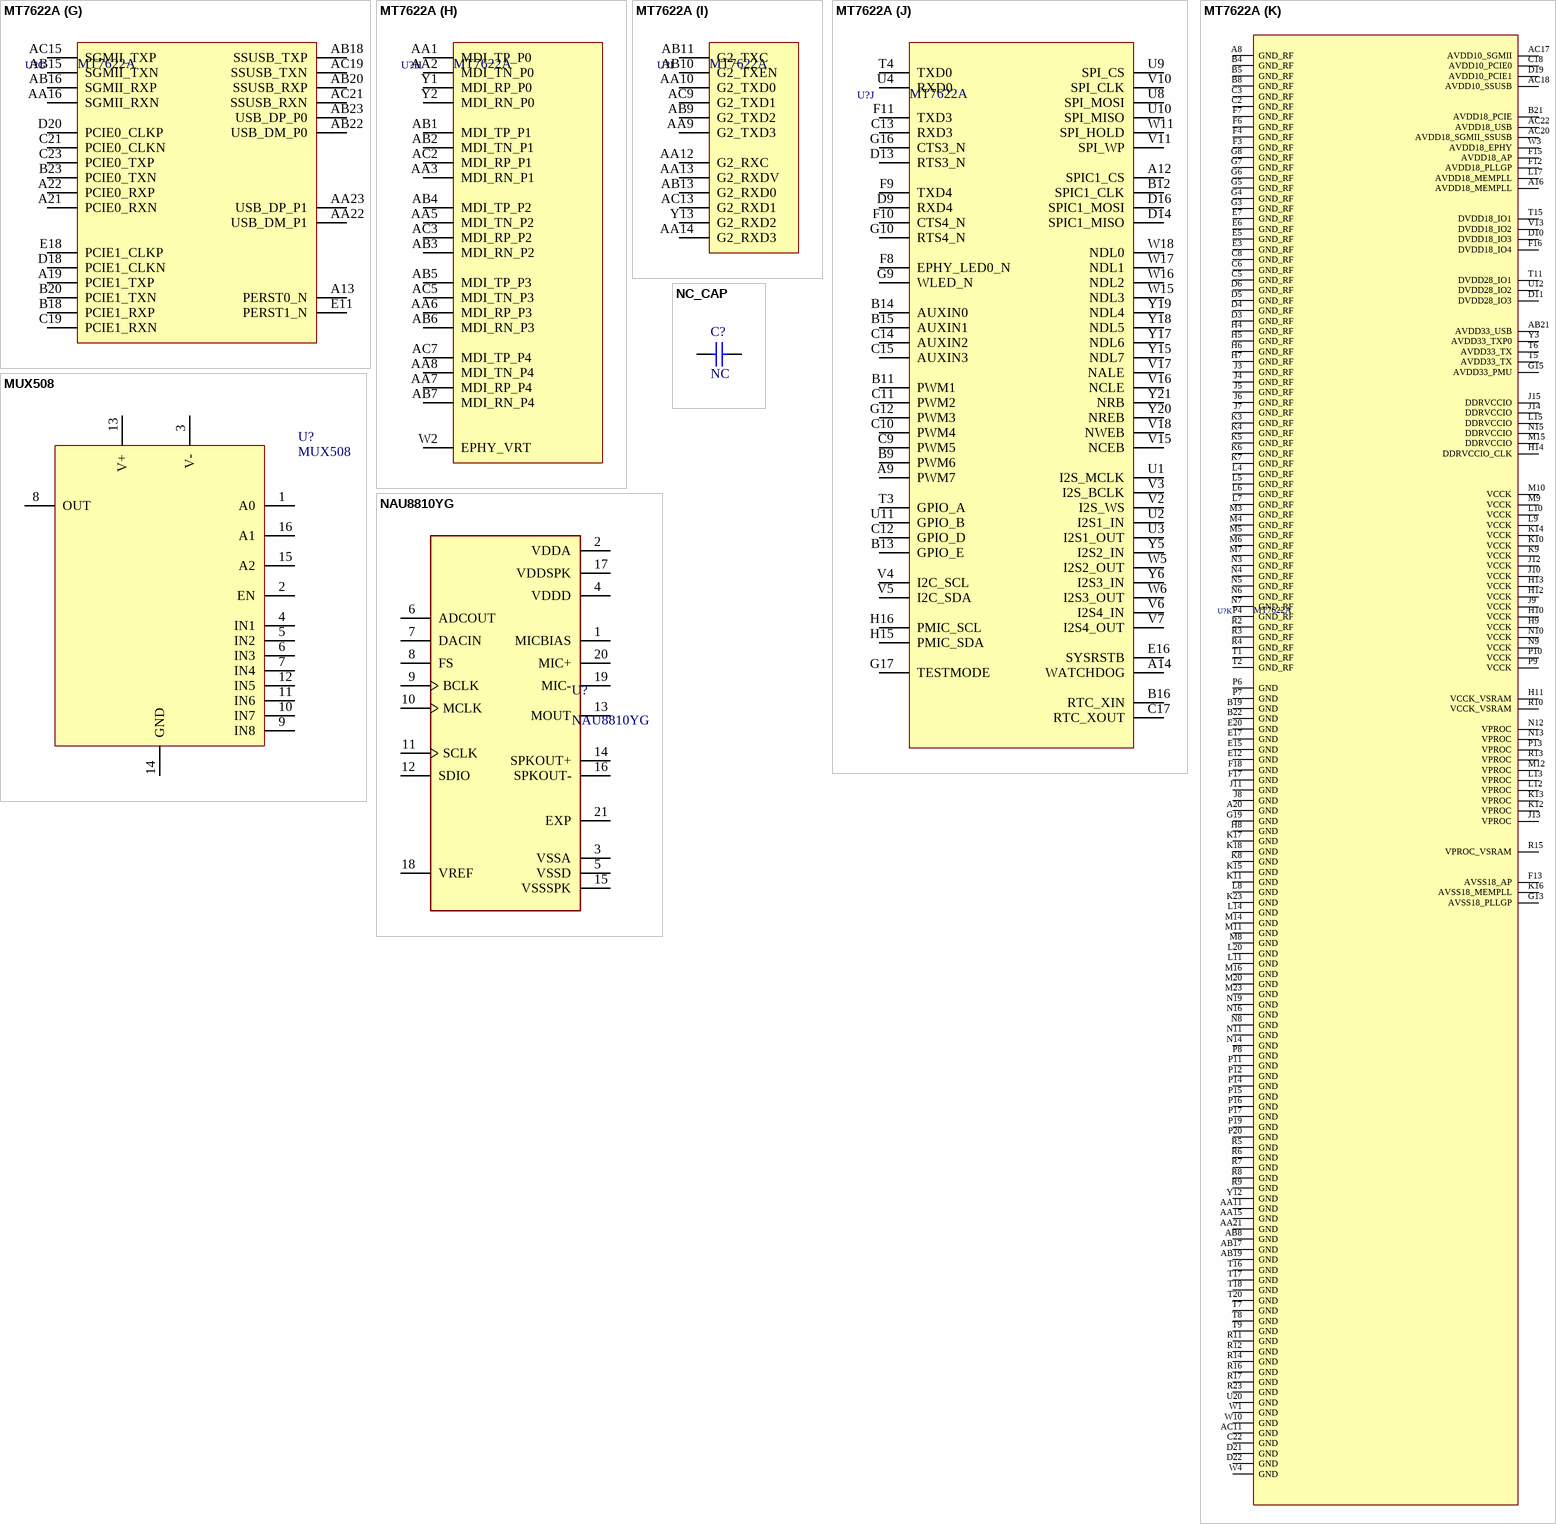
[diagram p19: symbols MT7622A to NC_CAP]

## MT7622A
designator U?
Manufacturer: Rohm Semiconductor; Manufacturer Part Number: MT7622A; Value: MT7622A
footprint MT7622A (BGA, 529-Leads, Body 15.00x15.00mmx1.20mm, Pitch 0.65mm)
part A pins: E21 RBA0 / RA14 /NC, E22 RA7 / RA1 / RA7, E23 RA13 / RA12 / RA3, F19 RCLK0_, F20 RCLK0, F21 RA2 / RA8 / RA9, F22 RA9 / RA11 / RA12, G21 RA15 / RBA1 / RBA1, G22 RBA2 / RA4 / RA1, G23 RA0 / RA6 / RA5, H17 RCS_, H18 RA5 / RBA0 / RA10, H19 RCKE, H21 RA12 / RBA2 / RWE_, J16 TP_MEMPLL, J18 DDR3RSTB / DDR3RSTB / NC, J19 RODT_, J20 RA1 / RA0 / RA11, J21 RA11 / RA9 / RA8, J22 RA14 / RA2 / RA13, K19 RA3 / RA15 / NC, K20 RWE_ / RA10 / RCAS_, K21 RA6 / RA5 / RA4, K22 RA8 / RA13 / RA6, L18 RCAS_ / RWE_ / RBA0, L21 RBA1 / RA7 / RA0, L22 RA4 / RA3 / RA2, M17 RDQM1, M18 RRAS_ / RCAS_ / RBA2, M19 RA10 / RRAS_ / RRAS_, M21 RDQ7 / RDQ9 / RDQ5, N17 RDQS1, N18 RDQS1_, N20 RDQ3 / RDQ13 / RDQ0, N21 RDQ5 / RDQ11 / RDQ7, N22 RDQ1 / RDQ15 / RDQ2, P21 RDQ12 / RDQ14 / RDQ15, P22 RDQ14 / RDQ12 / RDQ13, R18 RDQS0, R19 RDQS0_, R20 RVREF, R21 RDQ10 / RDQ8 / RDQ8, T19 RDQM0, T21 RDQ8 / RDQ10 / RDQ14, T22 RDQ11 / RDQ3 / RDQ9, T23 RDQ9 / RDQ1 / RDQ10, U21 RDQ15 / RDQ7 / RDQ12, U22 RDQ13 / RDQ5 / RDQ11, V21 RDQ0 / RDQ4 / RDQ6, W20 REXTDN, W21 RDQ2 / RDQ6 / RDQ1, W22 RDQ6 / RDQ0 / RDQ3, W23 RDQ4 / RDQ2 /RDQ4
part B pins: A2 AVDD13_WF0_SX, A3 AVDD13_WF0_AFE, B1 AVDD13_WF0_TRX, B2 AVDD22_WF0, B3 AVDD22_WF0_BBPLL, C1 WF0_RXG_LNA_IN, C4 WF0_VCO_MON, D2 WF0_RFIO_G, E1 AVDD33_WF0_PA, E2 AVDD33_WF0_PA
part C pins: E4 AVDD13_WF1_TRX, F2 WF1_RXG_LNA_IN, G2 WF1_RFIO_G, H1 AVDD33_WF1_PA, H2 AVDD33_WF1_PA
part D pins: H3 AVDD13_WF2_TRX, J2 WF2_RXG_LNA_IN, K2 WF2_RFIO_G, L1 AVDD33_WF2_PA, L2 AVDD33_WF2_PA
part E pins: L3 AVDD13_WF3_TRX, M2 WF3_RXG_LNA_IN, N2 WF3_RFIO_G, P1 AVDD33_WF3_PA, P2 AVDD33_WF3_PA, P3 AVDD22_WF3, R1 AVDD13_WF3_AFE
part F pins: A4 XO, A5 AVDD22_XO, A6 AVDD22_BT, A7 RFIP_BT, B7 AVDD33_BT, C7 AVDD13_BT
part G pins: A13 PERST0_N, A19 PCIE1_TXP, A21 PCIE0_RXN, A22 PCIE0_RXP, AA16 SGMII_RXN, AA22 USB_DM_P1, AA23 USB_DP_P1, AB15 SGMII_TXN, AB16 SGMII_RXP, AB18 SSUSB_TXP, AB20 SSUSB_RXP, AB22 USB_DM_P0, AB23 USB_DP_P0, AC15 SGMII_TXP, AC19 SSUSB_TXN, AC21 SSUSB_RXN, B18 PCIE1_RXP, B20 PCIE1_TXN, B23 PCIE0_TXN, C19 PCIE1_RXN, C21 PCIE0_CLKN, C23 PCIE0_TXP, D18 PCIE1_CLKN, D20 PCIE0_CLKP, E11 PERST1_N, E18 PCIE1_CLKP
part H pins: AA1 MDI_TP_P0, AA2 MDI_TN_P0, AA3 MDI_RN_P1, AA5 MDI_TN_P2, AA6 MDI_RP_P3, AA7 MDI_RP_P4, AA8 MDI_TN_P4, AB1 MDI_TP_P1, AB2 MDI_TN_P1, AB3 MDI_RN_P2, AB4 MDI_TP_P2, AB5 MDI_TP_P3, AB6 MDI_RN_P3, AB7 MDI_RN_P4, AC2 MDI_RP_P1, AC3 MDI_RP_P2, AC5 MDI_TN_P3, AC7 MDI_TP_P4, W2 EPHY_VRT, Y1 MDI_RP_P0, Y2 MDI_RN_P0
part I pins: AA9 G2_TXD3, AA10 G2_TXD0, AA12 G2_RXC, AA13 G2_RXDV, AA14 G2_RXD3, AB9 G2_TXD2, AB10 G2_TXEN, AB11 G2_TXC, AB13 G2_RXD0, AC9 G2_TXD1, AC13 G2_RXD1, Y13 G2_RXD2
part J pins: A9 PWM7, A12 SPIC1_CS, A14 WATCHDOG, B9 PWM6, B11 PWM1, B12 SPIC1_CLK, B13 GPIO_E, B14 AUXIN0, B15 AUXIN1, B16 RTC_XIN, C9 PWM5, C10 PWM4, C11 PWM2, C12 GPIO_D, C13 RXD3, C14 AUXIN2, C15 AUXIN3, C17 RTC_XOUT, D9 RXD4, D13 RTS3_N, D14 SPIC1_MISO, D16 SPIC1_MOSI, E16 SYSRSTB, F8 EPHY_LED0_N, F9 TXD4, F10 CTS4_N, F11 TXD3, G9 WLED_N, G10 RTS4_N, G12 PWM3, G16 CTS3_N, G17 TESTMODE, H15 PMIC_SDA, H16 PMIC_SCL, T3 GPIO_A, T4 TXD0, U1 I2S_MCLK, U2 I2S1_IN, U3 I2S1_OUT, U4 RXD0, U8 SPI_MOSI, U9 SPI_CS, U10 SPI_MISO, U11 GPIO_B, V2 I2S_WS, V3 I2S_BCLK, V4 I2C_SCL, V5 I2C_SDA, V6 I2S4_IN, V7 I2S4_OUT, V10 SPI_CLK, V11 SPI_WP, V15 NCEB, V16 NCLE, V17 NALE, V18 NWEB, W5 I2S2_OUT, W6 I2S3_OUT, W11 SPI_HOLD, W15 NDL3, W16 NDL2, W17 NDL1, W18 NDL0, Y5 I2S2_IN, Y6 I2S3_IN, Y15 NDL7, Y17 NDL6, Y18 NDL5, Y19 NDL4, Y20 NREB, Y21 NRB
part K pins: A8 GND_RF, A16 AVDD18_MEMPLL, A20 GND, AA11 GND, AA15 GND, AA21 GND, AB8 GND, AB17 GND, AB19 GND, AB21 AVDD33_USB, AC11 GND, AC17 AVDD10_SGMII, AC18 AVDD10_SSUSB, AC20 AVDD18_SGMII_SSUSB, AC22 AVDD18_USB, B4 GND_RF, B5 GND_RF, B8 GND_RF, B19 GND, B21 AVDD18_PCIE, B22 GND, C2 GND_RF, C3 GND_RF, C5 GND_RF, C6 GND_RF, C8 GND_RF, C18 AVDD10_PCIE0, C22 GND, D3 GND_RF, D4 GND_RF, D5 GND_RF, D6 GND_RF, D10 DVDD18_IO3, D11 DVDD28_IO3, D19 AVDD10_PCIE1, D21 GND, D22 GND, E3 GND_RF, E5 GND_RF, E6 GND_RF, E7 GND_RF, E12 GND, E15 GND, E17 GND, E20 GND, F3 GND_RF, F4 GND_RF, F6 GND_RF, F7 GND_RF, F12 AVDD18_PLLGP, F13 AVSS18_AP, F15 AVDD18_AP, F16 DVDD18_IO4, F17 GND, F18 GND, G3 GND_RF, G4 GND_RF, G5 GND_RF, G6 GND_RF, G7 GND_RF, G8 GND_RF, G13 AVSS18_PLLGP, G15 AVDD33_PMU, G19 GND, H4 GND_RF, H5 GND_RF, H6 GND_RF, H7 GND_RF, H8 GND, H9 VCCK, H10 VCCK, H11 VCCK_VSRAM, H12 VCCK, H13 VCCK, H14 DDRVCCIO_CLK, J3 GND_RF, J4 GND_RF, J5 GND_RF, J6 GND_RF, J7 GND_RF, J8 GND, J9 VCCK, J10 VCCK, J11 GND, J12 VCCK, J13 VPROC, J14 DDRVCCIO, J15 DDRVCCIO, K3 GND_RF, K4 GND_RF, K5 GND_RF, K6 GND_RF, K7 GND_RF, K8 GND, K9 VCCK, K10 VCCK, K11 GND, K12 VPROC, K13 VPROC, K14 VCCK, K15 GND, K16 AVSS18_MEMPLL, K17 GND, K18 GND, K23 GND, L4 GND_RF, L5 GND_RF, L6 GND_RF, L7 GND_RF, L8 GND, L9 VCCK, L10 VCCK, L11 GND, L12 VPROC, L13 VPROC, L14 GND, L15 DDRVCCIO, L17 AVDD18_MEMPLL, L20 GND, M3 GND_RF, M4 GND_RF, M5 GND_RF, M6 GND_RF, M7 GND_RF, M8 GND, M9 VCCK, M10 VCCK, M11 GND, M12 VPROC, M14 GND, M15 DDRVCCIO, M16 GND, M20 GND, M23 GND, N3 GND_RF, N4 GND_RF, N5 GND_RF, N6 GND_RF, N7 GND_RF, N8 GND, N9 VCCK, N10 VCCK, N11 GND, N12 VPROC, N13 VPROC, N14 GND, N15 DDRVCCIO, N16 GND, N19 GND, P4 GND_RF, P6 GND, P7 GND, P8 GND, P9 VCCK, P10 VCCK, P11 GND, P12 GND, P13 VPROC, P14 GND, P15 GND, P16 GND, P17 GND, P19 GND, P20 GND, R2 GND_RF, R3 GND_RF, R4 GND_RF, R5 GND, R6 GND, R7 GND, R8 GND, R9 GND, R10 VCCK_VSRAM, R11 GND, R12 GND, R13 VPROC, R14 GND, R15 VPROC_VSRAM, R16 GND, R17 GND, R23 GND, T1 GND_RF, T2 GND_RF, T5 AVDD33_TX, T6 AVDD33_TX, T7 GND, T8 GND, T9 GND, T11 DVDD28_IO1, T15 DVDD18_IO1, T16 GND, T17 GND, T18 GND, T20 GND, U12 DVDD28_IO2, U20 GND, V13 DVDD18_IO2, W1 GND, W3 AVDD18_EPHY, W4 GND, W10 GND, Y3 AVDD33_TXP0, Y12 GND

## MUX508
designator U?
Multiplexer Switch ICs A 595-MUX508IPW; Manufacturer: Texas Instruments; Manufacturer Part Number: MUX508IPWR; Package: TSSOP-16; Supplier: Mouser; Supplier Part Number: 595-MUX508IPWR; Unit Price: *; Value: MUX508
footprint MUX508
pins: 1 A0, 2 EN, 3 V-, 4 IN1, 5 IN2, 6 IN3, 7 IN4, 8 OUT, 9 IN8, 10 IN7, 11 IN6, 12 IN5, 13 V+, 14 GND, 15 A2, 16 A1

## NAU8810YG
designator U?
IC AUDIO CODEC MONO 20QFN; Manufacturer: Nuvoton Technology Corporation; SPN: NAU8810YG-ND; MPN: NAU8810YG; Package: 20QFN; Supplier: Digi-Key
pins: 1 MICBIAS, 2 VDDA, 3 VSSA, 4 VDDD, 5 VSSD, 6 ADCOUT, 7 DACIN, 8 FS, 9 BCLK, 10 MCLK, 11 SCLK, 12 SDIO, 13 MOUT, 14 SPKOUT+, 15 VSSSPK, 16 SPKOUT-, 17 VDDSPK, 18 VREF, 19 MIC-, 20 MIC+, 21 EXP